# Altium integrated library ALL_COMP (5).IntLib: 200 symbols (part 1 of 2)
Pins are listed as number, name and electrical type; pins without a type are passive.

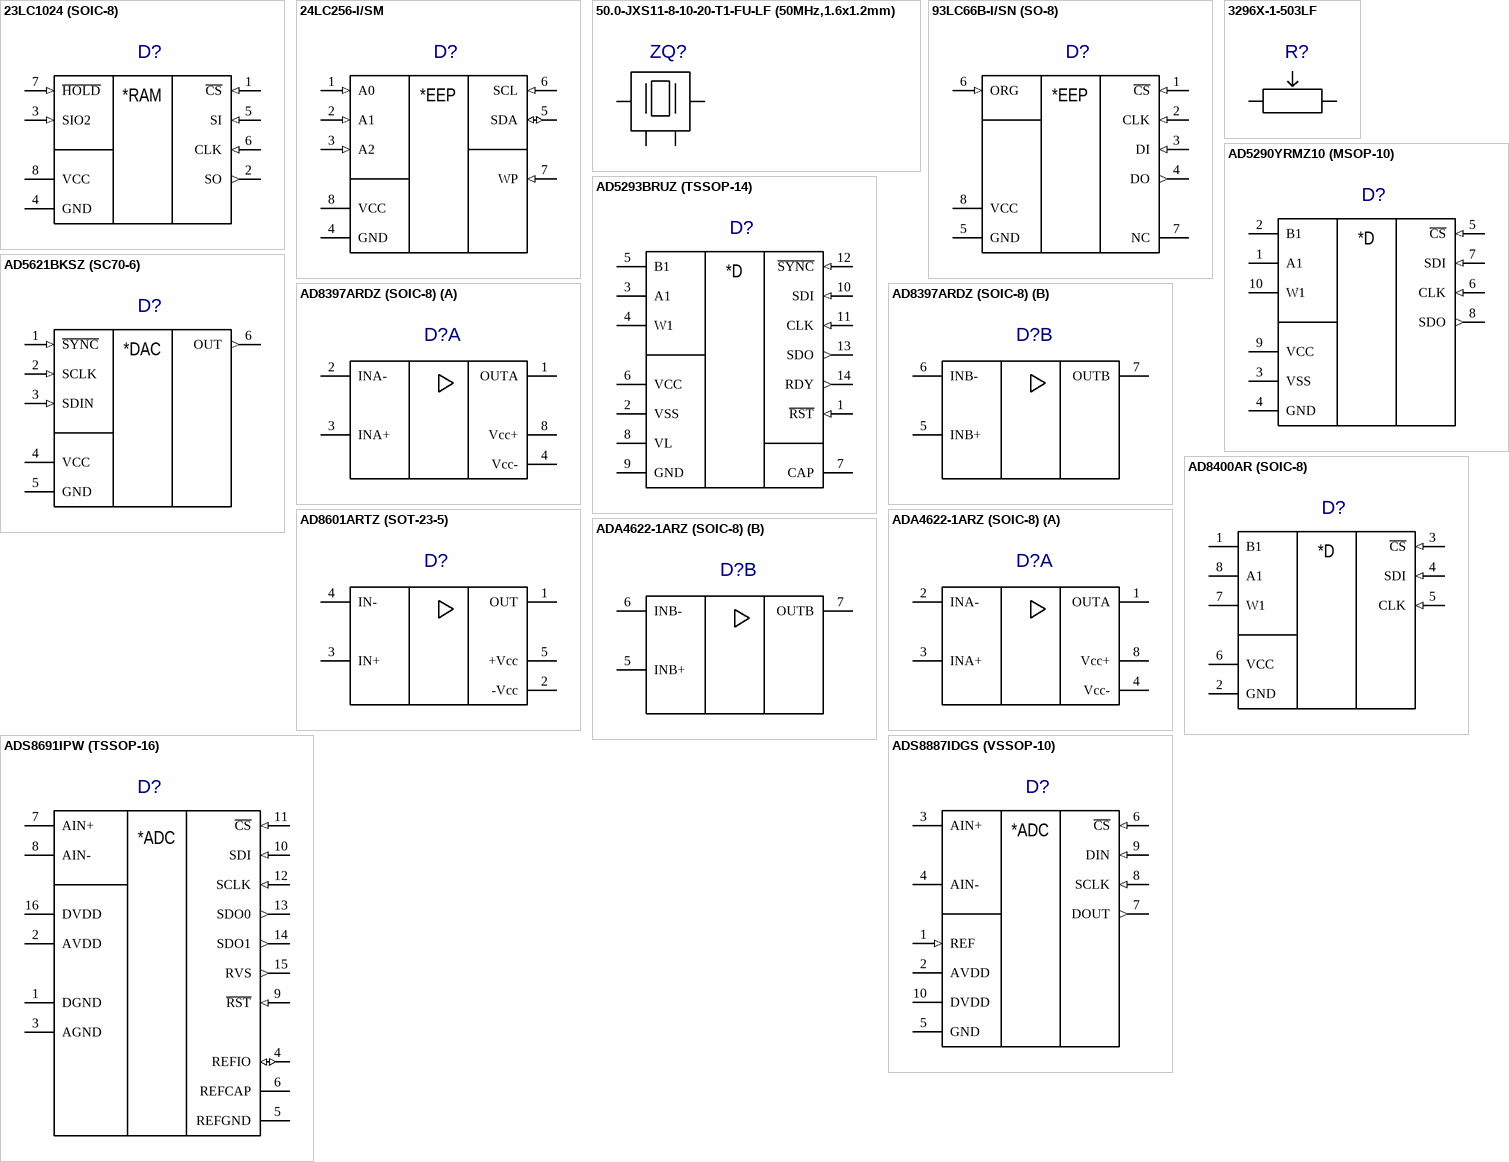
[diagram p0: symbols 23LC1024 (SOIC-8) to ADS8887IDGS (VSSOP-10)]

## 23LC1024 (SOIC-8)
designator D?  (value not drawn)
ComponentHeigt: 1.8; Firme: Linear; Leadform: формована; Kind: Микросхема; ClassName: *; Component Link: *; Packaging: SOT-223; NN: *
footprint SOIC-8(R-8)
pins: 1 ~{CS} (in), 2 SO (out), 3 SIO2 (in), 4 GND, 5 SI (in), 6 CLK (in), 7 ~{HOLD} (in), 8 VCC (power)
text: *RAM

## 24LC256-I/SM
designator D?  (value not drawn)
ComponentHeigt: 1.8; Firme: Linear; Leadform: формована; Kind: Микросхема; ClassName: *; Component Link: *; Packaging: SOT-223; NN: *
footprint SOIC-8(R-8)
pins: 1 A0 (in), 2 A1 (in), 3 A2 (in), 4 GND, 5 SDA (io), 6 SCL (in), 7 WP (in), 8 VCC (power)
text: *EEP

## 50.0-JXS11-8-10-20-T1-FU-LF (50MHz,1.6x1.2mm)
designator ZQ?  (value not drawn)
ComponentHeigt: 1.8; Firme: Linear; Leadform: формована; Kind: Микросхема; ClassName: *; Component Link: *; Packaging: SOT-223; NN: *
footprint 50.0-JXS11-8-10-20-T1-FU-LF (50MHz,1.6x1.2mm) (HC-49SM)
pins: 1 (power), 2 (power), 3 (power), 4 (power)

## 93LC66B-I/SN (SO-8)
designator D?  (value not drawn)
ComponentHeigt: 1.8; Firme: Linear; Leadform: формована; Kind: Микросхема; ClassName: *; Component Link: *; Packaging: SOT-223; NN: *
footprint SOIC-8(R-8)
pins: 1 ~{CS} (in), 2 CLK (in), 3 DI (in), 4 DO (out), 5 GND, 6 ORG (in), 7 NC, 8 VCC (power)
text: *EEP

## 3296X-1-503LF
designator R?  (value not drawn)
ComponentHeigt: 0.6; Firme: Yageo; Leadform: SMD; Kind: Резистор; ClassName: *; ComponentWeigt: *; Component Link: *; Packaging: 0805; NN: *; Value: *
footprint 3296X-1-503LF
pins: 1, 2, 3

## AD5290YRMZ10 (MSOP-10)
designator D?  (value not drawn)
ComponentHeigt: 1.8; Firme: Linear; Leadform: формована; Kind: Микросхема; ClassName: *; Component Link: *; Packaging: SOT-223; NN: *
footprint MSOP-10
pins: 1 A1, 2 B1, 3 VSS (power), 4 GND, 5 ~{CS} (in), 6 CLK (in), 7 SDI (in), 8 SDO (out), 9 VCC (power), 10 W1
text: *D

## AD5293BRUZ (TSSOP-14)
designator D?  (value not drawn)
ComponentHeigt: 1.8; Firme: Linear; Leadform: формована; Kind: Микросхема; ClassName: *; Component Link: *; Packaging: SOT-223; NN: *
footprint TSSOP-14
pins: 1 ~{RST} (in), 2 VSS (power), 3 A1, 4 W1, 5 B1, 6 VCC (power), 7 CAP, 8 VL (power), 9 GND, 10 SDI (in), 11 CLK (in), 12 ~{SYNC} (in), 13 SDO (out), 14 RDY (out)
text: *D

## AD5621BKSZ (SC70-6)
designator D?  (value not drawn)
ComponentHeigt: 1.8; Firme: Linear; Leadform: формована; Kind: Микросхема; ClassName: *; Component Link: *; Packaging: SOT-223; NN: *
footprint SC70-6
pins: 1 ~{SYNC} (in), 2 SCLK (in), 3 SDIN (in), 4 VCC (power), 5 GND, 6 OUT (out)
text: *DAC

## AD8397ARDZ (SOIC-8)
designator D?  (value not drawn)
ComponentHeigt: 1.75; Firme: AD; Leadform: SMD; NN: 28017970; Kind: Микросхема OP184FSZ AD; ClassName: *; Component Link: http://www.analog.com/; ComponentWeigt: *; Packaging: SOIC-8(R-8)
footprint SOIC-8(RD-8-2)
part A pins: 1 OUTA, 2 INA-, 3 INA+, 4 Vcc-, 8 Vcc+
part B pins: 5 INB+, 6 INB-, 7 OUTB

## AD8400AR (SOIC-8)
designator D?  (value not drawn)
ComponentHeigt: 1.8; Firme: Linear; Leadform: формована; Kind: Микросхема; ClassName: *; Component Link: *; Packaging: SOT-223; NN: *
footprint SOIC-8(R-8)
pins: 1 B1, 2 GND, 3 ~{CS} (in), 4 SDI (in), 5 CLK (in), 6 VCC (power), 7 W1, 8 A1
text: *D

## AD8601ARTZ (SOT-23-5)
designator D?  (value not drawn)
ComponentHeigt: 1.75; Firme: AD; Leadform: SMD; NN: 28017970; Kind: Микросхема OP184FSZ AD; ClassName: *; Component Link: http://www.analog.com/; ComponentWeigt: *; Packaging: SOIC-8(R-8)
footprint SOT-23-5
pins: 1 OUT, 2 -Vcc, 3 IN+, 4 IN-, 5 +Vcc (power)

## ADA4622-1ARZ (SOIC-8)
designator D?  (value not drawn)
ComponentHeigt: 1.75; Firme: AD; Leadform: SMD; NN: 28017970; Kind: Микросхема OP184FSZ AD; ClassName: *; Component Link: http://www.analog.com/; ComponentWeigt: *; Packaging: SOIC-8(R-8)
footprint SOIC-8(R-8)
part A pins: 1 OUTA, 2 INA-, 3 INA+, 4 Vcc-, 8 Vcc+
part B pins: 5 INB+, 6 INB-, 7 OUTB

## ADS8691IPW (TSSOP-16)
designator D?  (value not drawn)
ComponentHeigt: 1.8; Firme: Linear; Leadform: формована; Kind: Микросхема; ClassName: *; Component Link: *; Packaging: SOT-223; NN: *
footprint TSSOP-16
pins: 1 DGND, 2 AVDD (power), 3 AGND, 4 REFIO (io), 5 REFGND, 6 REFCAP, 7 AIN+, 8 AIN-, 9 ~{RST} (in), 10 SDI (in), 11 ~{CS} (in), 12 SCLK (in), 13 SDO0 (out), 14 SDO1 (out), 15 RVS (out), 16 DVDD (power)
text: *ADC

## ADS8887IDGS (VSSOP-10)
designator D?  (value not drawn)
ComponentHeigt: 1.8; Firme: Linear; Leadform: формована; Kind: Микросхема; ClassName: *; Component Link: *; Packaging: SOT-223; NN: *
footprint VSSOP-10
pins: 1 REF (in), 2 AVDD (power), 3 AIN+, 4 AIN-, 5 GND, 6 ~{CS} (in), 7 DOUT (out), 8 SCLK (in), 9 DIN (in), 10 DVDD (power)
text: *ADC

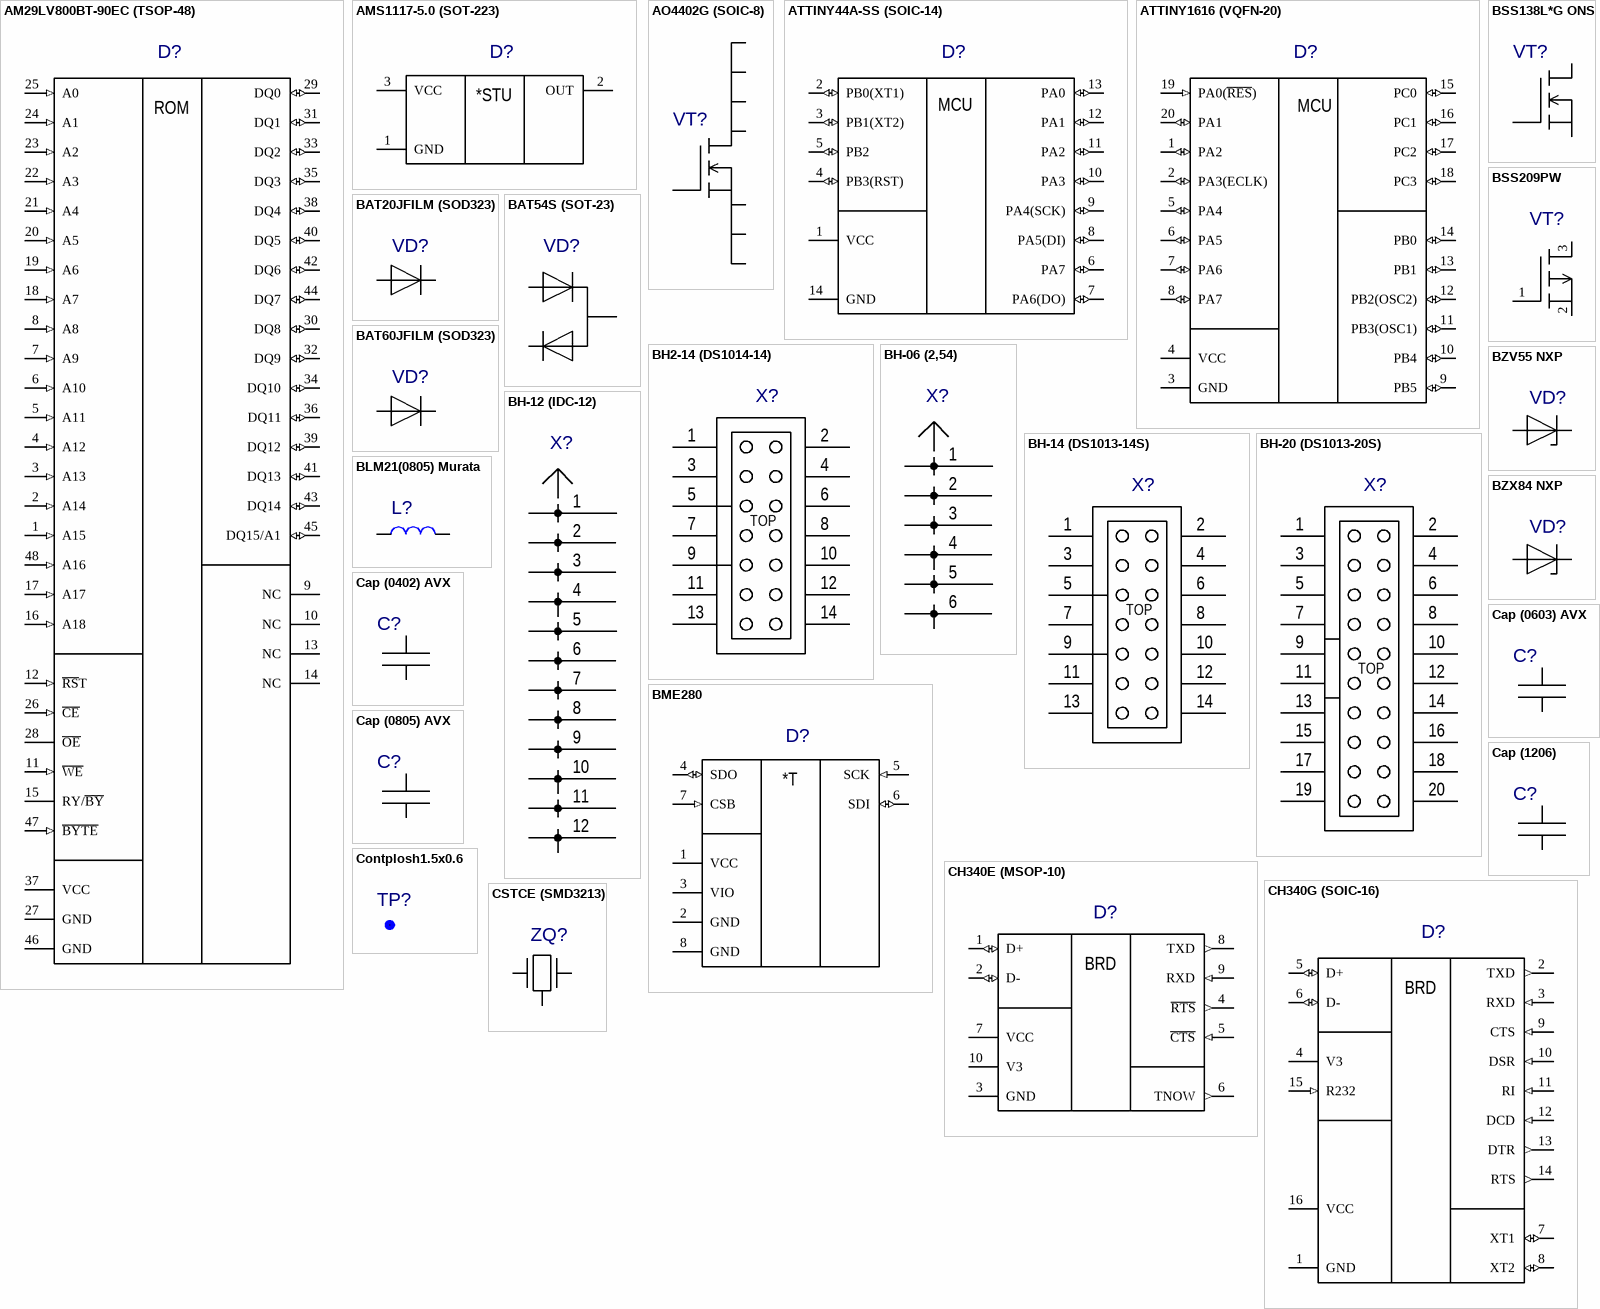
[diagram p1: symbols AM29LV800BT-90EC (TSOP-48) to CSTCE (SMD3213)]

## AM29LV800BT-90EC (TSOP-48)
designator D?
Leadform: по чертежу; Note: Установка по чертежу; Kind: Микросхема; Component Link: www.honeywell.com/radhard; ClassName: *; NN: *
footprint TSOP-48 (ZIF)
pins: 1 A15 (in), 2 A14 (in), 3 A13 (in), 4 A12 (in), 5 A11 (in), 6 A10 (in), 7 A9 (in), 8 A8 (in), 9 NC, 10 NC, 11 ~{WE} (in), 12 ~{RS}T (in), 13 NC, 14 NC, 15 RY/~{BY}, 16 A18 (in), 17 A17 (in), 18 A7 (in), 19 A6 (in), 20 A5 (in), 21 A4 (in), 22 A3 (in), 23 A2 (in), 24 A1 (in), 25 A0 (in), 26 ~{CE} (in), 27 GND, 28 ~{OE}, 29 DQ0 (io), 30 DQ8 (io), 31 DQ1 (io), 32 DQ9 (io), 33 DQ2 (io), 34 DQ10 (io), 35 DQ3 (io), 36 DQ11 (io), 37 VCC (power), 38 DQ4 (io), 39 DQ12 (io), 40 DQ5 (io), 41 DQ13 (io), 42 DQ6 (io), 43 DQ14 (io), 44 DQ7 (io), 45 DQ15/A1 (io), 46 GND, 47 ~{BYTE} (in), 48 A16 (in)
text: ROM

## AMS1117-5.0 (SOT-223)
designator D?  (value not drawn)
ComponentHeigt: 1.8; Firme: Linear; Leadform: формована; Kind: Микросхема; ClassName: *; Component Link: *; Packaging: SOT-223; NN: *
footprint SOT-223
pins: 1 GND, 2 OUT, 3 VCC (power)
text: *STU

## AO4402G (SOIC-8)
designator VT?
ComponentHeigt: 1.1; Firme: ONS; Leadform: SMD; NN: 24005234; KIND: Транзистор BSS138L*G ONS; ClassName: *; ComponentWeigt: *; Packaging: SOT-23
footprint SOIC-8(R-8)
pins: 1 S, 2 S, 3 S, 4 G, 5 D, 6 D, 7 D, 8 D

## ATTINY44A-SS (SOIC-14)
designator D?
Leadform: по чертежу; Note: Установка по чертежу; Kind: Микросхема; Component Link: www.honeywell.com/radhard; ClassName: *; NN: *
footprint SOIC-14
pins: 1 VCC (power), 2 PB0(XT1) (io), 3 PB1(XT2) (io), 4 PB3(RST) (io), 5 PB2 (io), 6 PA7 (io), 7 PA6(DO) (io), 8 PA5(DI) (io), 9 PA4(SCK) (io), 10 PA3 (io), 11 PA2 (io), 12 PA1 (io), 13 PA0 (io), 14 GND
text: MCU

## ATTINY1616 (VQFN-20)
designator D?
Leadform: по чертежу; Note: Установка по чертежу; Kind: Микросхема; Component Link: www.honeywell.com/radhard; ClassName: *; NN: *
footprint VQFN-20
pins: 1 PA2 (io), 2 PA3(ECLK) (io), 3 GND, 4 VCC (power), 5 PA4 (io), 6 PA5 (io), 7 PA6 (io), 8 PA7 (io), 9 PB5 (io), 10 PB4 (io), 11 PB3(OSC1) (io), 12 PB2(OSC2) (io), 13 PB1 (io), 14 PB0 (io), 15 PC0 (io), 16 PC1 (io), 17 PC2 (io), 18 PC3 (io), 19 PA0(~{RES}) (in), 20 PA1 (io)
text: MCU

## BAT20JFILM (SOD323)
designator VD?  (value not drawn)
ComponentHeigt: 0.75; Leadform: в отверстия; Firme: Kingbright; NN: 24003000; KIND: Светодиод L-1154GD Kingbright; Component Link: *; ClassName: *
footprint SOD323
pins: 1 A, 2 K
1 alternate drawing of the same symbol

## BAT54S (SOT-23)
designator VD?  (value not drawn)
ComponentHeigt: 0.75; Leadform: в отверстия; Firme: Kingbright; NN: 24003000; KIND: Светодиод L-1154GD Kingbright; Component Link: *; ClassName: *
footprint SOT-23
pins: 1 A, 2 K, 3 M
1 alternate drawing of the same symbol

## BAT60JFILM (SOD323)
designator VD?  (value not drawn)
ComponentHeigt: 0.75; Leadform: в отверстия; Firme: Kingbright; NN: 24003000; KIND: Светодиод L-1154GD Kingbright; Component Link: *; ClassName: *
footprint SOD323
pins: 1 A, 2 K
1 alternate drawing of the same symbol

## BH2-14 (DS1014-14)
designator X?  (value not drawn)
ComponentHeigt: 5.5; Name: Вилка; Specification: Вилка PLD2-2 *; Typ: PLD2-2; ClassName: *; Component Link: *; ComponentWeigt: *; Firme: *; Leadform: *; NN: *; KIND: *
footprint BH2-14 (DS1014-14)
pins: 1, 2, 3, 4, 5, 6, 7, 8, 9, 10, 11, 12, 13, 14
1 alternate drawing of the same symbol
text: TOP

## BH-06 (2,54)
designator X?  (value not drawn)
ComponentHeigt: 5.5; Name: Вилка; Specification: Вилка PLD2-2 *; Typ: PLD2-2; ClassName: *; Component Link: *; ComponentWeigt: *; Firme: *; Leadform: *; NN: *; KIND: *
footprint BH-06 (2,54)
pins: 1, 2, 3, 4, 5, 6
1 alternate drawing of the same symbol

## BH-12 (IDC-12)
designator X?  (value not drawn)
ComponentHeigt: 5.5; Name: Вилка; Specification: Вилка PLD2-2 *; Typ: PLD2-2; ClassName: *; Component Link: *; ComponentWeigt: *; Firme: *; Leadform: *; NN: *; KIND: *
footprint BH-12 (IDC-12)
pins: 1, 2, 3, 4, 5, 6, 7, 8, 9, 10, 11, 12
1 alternate drawing of the same symbol

## BH-14 (DS1013-14S)
designator X?  (value not drawn)
ComponentHeigt: 5.5; Name: Вилка; Specification: Вилка PLD2-2 *; Typ: PLD2-2; ClassName: *; Component Link: *; ComponentWeigt: *; Firme: *; Leadform: *; NN: *; KIND: *
footprint BH-14 (DS1013-14S)
pins: 1, 2, 3, 4, 5, 6, 7, 8, 9, 10, 11, 12, 13, 14
1 alternate drawing of the same symbol
text: TOP

## BH-20 (DS1013-20S)
designator X?  (value not drawn)
ComponentHeigt: 5.5; Name: Вилка; Specification: Вилка PLD2-2 *; Typ: PLD2-2; ClassName: *; Component Link: *; ComponentWeigt: *; Firme: *; Leadform: *; NN: *; KIND: *
footprint BH-20 (DS1013-20S)
pins: 1, 2, 3, 4, 5, 6, 7, 8, 9, 10, 11, 12, 13, 14, 15, 16, 17, 18, 19, 20
1 alternate drawing of the same symbol
text: TOP

## BLM21(0805) Murata
designator L?  (value not drawn)
ComponentHeigt: 1.1; Leadform: SMD; Firme: Murata; ClassName: *; Component Link: *; ComponentWeigt: *; Packaging: 1206; NN: *; KIND: *
footprint 0805
pins: 1, 2

## BME280
designator D?  (value not drawn)
ComponentHeigt: 1.8; Firme: Linear; Leadform: формована; Kind: Микросхема; ClassName: *; Component Link: *; Packaging: SOT-223; NN: *
footprint BME280
pins: 1 VCC (power), 2 GND, 3 VIO (power), 4 SDO (io), 5 SCK (in), 6 SDI (io), 7 CSB (in), 8 GND
text: *T

## BSS138L*G ONS
designator VT?
ComponentHeigt: 1.1; Firme: ONS; Leadform: SMD; NN: 24005234; KIND: Транзистор BSS138L*G ONS; ClassName: *; ComponentWeigt: *; Packaging: SOT-23
footprint SOT-23
pins: 1 G, 2 S, 3 D

## BSS209PW
designator VT?
ComponentHeigt: 0.9; Firme: Infineon; Leadform: SMD; NN: 24003422; KIND: Транзистор BSS209PW Infineon; ClassName: *; ComponentWeigt: *; Packaging: PG-SOT-323
footprint SOT-323
pins: 1 G, 2 S, 3 D

## BZV55 NXP
designator VD?  (value not drawn)
ComponentHeigt: 1.6; Leadform: SMD; Firme: NXP; KIND: Стабилитрон BZV55; ClassName: *; INV: *; Packaging: SOD80C
footprint SOD80C
pins: 1 A, 2 K

## BZX84 NXP
designator VD?  (value not drawn)
ComponentHeigt: 1.6; Leadform: SMD; Firme: NXP; KIND: Стабилитрон BZV55; ClassName: *; INV: *; Packaging: SOD80C
footprint SOT-23
pins: 1 A, 3 K

## Cap (0402) AVX
designator C?
ComponentHeigt: 1.3; Firme: AVX; Leadform: SMD; KIND: Конденсатор; ClassName: *; Component Link: *; ComponentWeigt: *; Packaging: 0805; NN: *; Value: *
footprint 0402
pins: 1, 2

## Cap (0603) AVX
designator C?
ComponentHeigt: 1.3; Firme: AVX; Leadform: SMD; KIND: Конденсатор; ClassName: *; Component Link: *; ComponentWeigt: *; Packaging: 0805; NN: *; Value: *
footprint 0603
pins: 1, 2

## Cap (0805) AVX
designator C?
ComponentHeigt: 1.3; Firme: AVX; Leadform: SMD; KIND: Конденсатор; ClassName: *; Component Link: *; ComponentWeigt: *; Packaging: 0805; NN: *; Value: *
footprint 0805
pins: 1, 2

## Cap (1206)
designator C?
ComponentHeigt: 1.3; Firme: AVX; Leadform: SMD; KIND: Конденсатор; ClassName: *; Component Link: *; ComponentWeigt: *; Packaging: 0805; NN: *; Value: *
footprint 1206
pins: 1, 2

## CH340E (MSOP-10)
designator D?
Leadform: по чертежу; Note: Установка по чертежу; Kind: Микросхема; Component Link: www.honeywell.com/radhard; ClassName: *; NN: *
footprint MSOP-10
pins: 1 D+ (io), 2 D- (io), 3 GND, 4 ~{RTS} (out), 5 ~{CTS} (in), 6 TNOW (out), 7 VCC (power), 8 TXD (out), 9 RXD (in), 10 V3
text: BRD

## CH340G (SOIC-16)
designator D?
Leadform: по чертежу; Note: Установка по чертежу; Kind: Микросхема; Component Link: www.honeywell.com/radhard; ClassName: *; NN: *
footprint SOIC-16
pins: 1 GND, 2 TXD (out), 3 RXD (in), 4 V3, 5 D+ (io), 6 D- (io), 7 XT1 (io), 8 XT2 (io), 9 CTS (in), 10 DSR (in), 11 RI (in), 12 DCD (in), 13 DTR (out), 14 RTS (out), 15 R232 (in), 16 VCC (power)
text: BRD

## Contplosh1.5x0.6
designator TP?  (value not drawn)
ClassName: *
footprint Plosh15X06
pins: 1

## CSTCE (SMD3213)
designator ZQ?  (value not drawn)
footprint CSTCE (SMD3213)
pins: 1 (power), 2 (power), 3 (power)

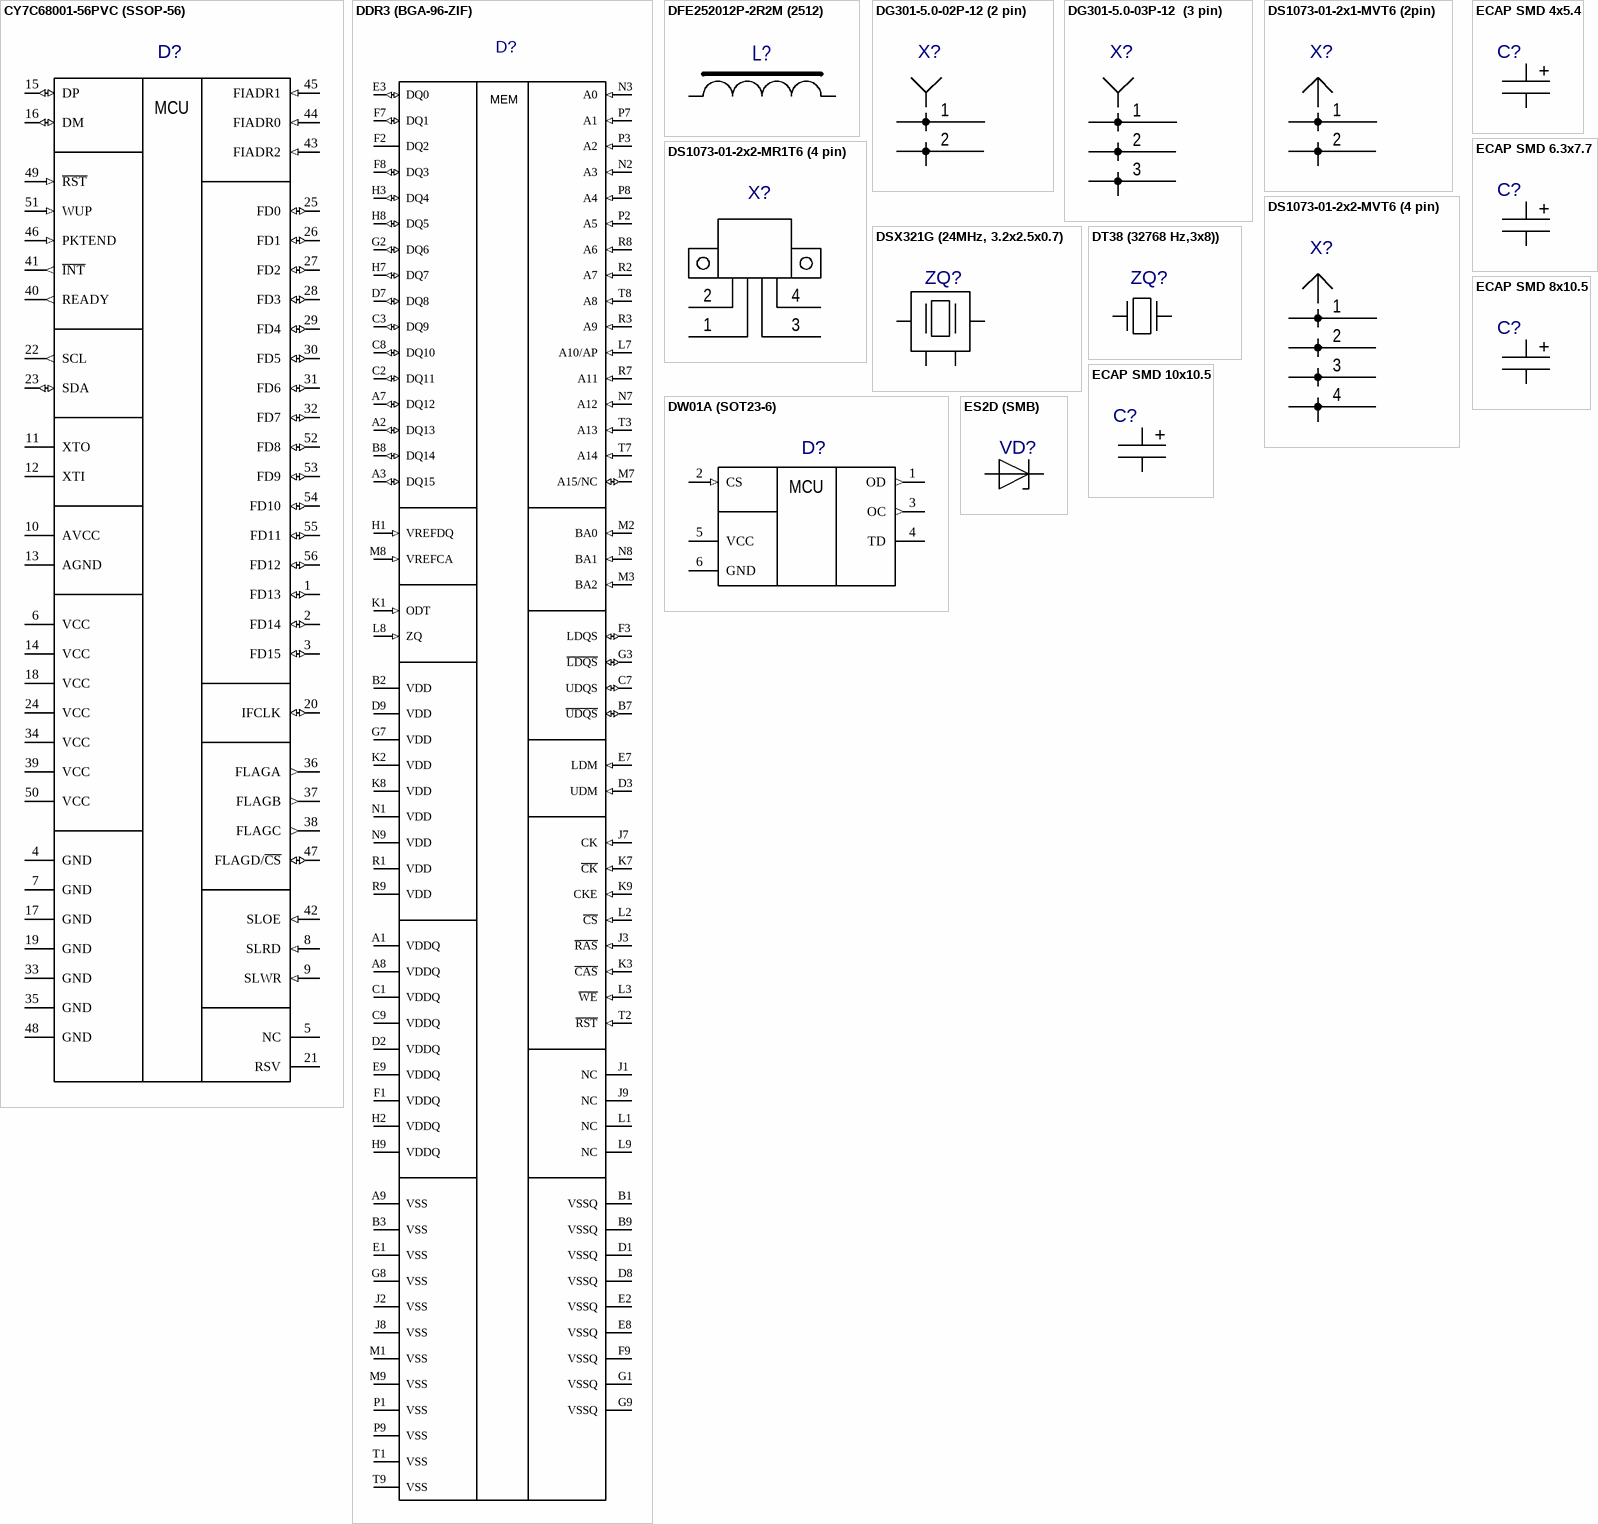
[diagram p2: symbols CY7C68001-56PVC (SSOP-56) to ES2D (SMB)]

## CY7C68001-56PVC (SSOP-56)
designator D?
Leadform: по чертежу; Note: Установка по чертежу; Kind: Микросхема; Component Link: www.honeywell.com/radhard; ClassName: *; NN: *
footprint SSOP-56
pins: 1 FD13 (io), 2 FD14 (io), 3 FD15 (io), 4 GND, 5 NC, 6 VCC (power), 7 GND, 8 SLRD (in), 9 SLWR (in), 10 AVCC (power), 11 XTO, 12 XTI, 13 AGND, 14 VCC (power), 15 DP (io), 16 DM (io), 17 GND, 18 VCC (power), 19 GND, 20 IFCLK (io), 21 RSV, 22 SCL (out), 23 SDA (io), 24 VCC (power), 25 FD0 (io), 26 FD1 (io), 27 FD2 (io), 28 FD3 (io), 29 FD4 (io), 30 FD5 (io), 31 FD6 (io), 32 FD7 (io), 33 GND, 34 VCC (power), 35 GND, 36 FLAGA (out), 37 FLAGB (out), 38 FLAGC (out), 39 VCC (power), 40 READY (out), 41 ~{INT} (out), 42 SLOE (in), 43 FIADR2 (in), 44 FIADR0 (in), 45 FIADR1 (in), 46 PKTEND (in), 47 FLAGD/~{CS} (io), 48 GND, 49 ~{RST} (in), 50 VCC (power), 51 WUP (in), 52 FD8 (io), 53 FD9 (io), 54 FD10 (io), 55 FD11 (io), 56 FD12 (io)
text: MCU

## DDR3 (BGA-96-ZIF)
designator D?
Leadform: по чертежу; Note: Установка по чертежу; Kind: Микросхема; Component Link: www.honeywell.com/radhard; ClassName: *; NN: *
footprint VFBGA-96 (ZIF)
pins: A1 VDDQ (power), A2 DQ13 (io), A3 DQ15 (io), A7 DQ12 (io), A8 VDDQ (power), A9 VSS, B1 VSSQ, B2 VDD (power), B3 VSS, B7 ~{UDQS} (io), B8 DQ14 (io), B9 VSSQ, C1 VDDQ (power), C2 DQ11 (io), C3 DQ9 (io), C7 UDQS (io), C8 DQ10 (io), C9 VDDQ (power), D1 VSSQ, D2 VDDQ (power), D3 UDM (in), D7 DQ8 (io), D8 VSSQ, D9 VDD (power), E1 VSS, E2 VSSQ, E3 DQ0 (io), E7 LDM (in), E8 VSSQ, E9 VDDQ (power), F1 VDDQ (power), F2 DQ2, F3 LDQS (io), F7 DQ1 (io), F8 DQ3 (io), F9 VSSQ, G1 VSSQ, G2 DQ6 (io), G3 ~{LDQS} (io), G7 VDD (power), G8 VSS, G9 VSSQ, H1 VREFDQ (in), H2 VDDQ (power), H3 DQ4 (io), H7 DQ7 (io), H8 DQ5 (io), H9 VDDQ (power), J1 NC, J2 VSS, J3 ~{RAS} (in), J7 CK (in), J8 VSS, J9 NC, K1 ODT (in), K2 VDD (power), K3 ~{CAS} (in), K7 ~{CK} (in), K8 VDD (power), K9 CKE (in), L1 NC, L2 ~{CS} (in), L3 ~{WE} (in), L7 A10/AP (in), L8 ZQ (in), L9 NC, M1 VSS, M2 BA0 (in), M3 BA2 (in), M7 A15/NC (io), M8 VREFCA (in), M9 VSS, N1 VDD (power), N2 A3 (in), N3 A0 (in), N7 A12 (in), N8 BA1 (in), N9 VDD (power), P1 VSS, P2 A5 (in), P3 A2 (in), P7 A1 (in), P8 A4 (in), P9 VSS, R1 VDD (power), R2 A7 (in), R3 A9 (in), R7 A11 (in), R8 A6 (in), R9 VDD (power), T1 VSS, T2 ~{RST} (in), T3 A13 (in), T7 A14 (in), T8 A8 (in), T9 VSS
text: MEM

## DFE252012P-2R2M (2512)
designator L?, comment 0.37 Ohm  (value not drawn)
Value: {Value}; ComponentHeigt: 3.2; Firm: TDK; Name: Катушка индуктивности; Kind: Катушка индуктивности B82432T TDK; Typ: B82432T; NN: *; Packaging: SIMIT 1812-T
footprint DFE252012P-2R2M (2512)
pins: 1, 2

## DG301-5.0-02P-12 (2 pin)
designator X?  (value not drawn)
ComponentHeigt: 5.5; Name: Вилка; Specification: Вилка PLD2-2 *; Typ: PLD2-2; ClassName: *; Component Link: *; ComponentWeigt: *; Firme: *; Leadform: *; NN: *; KIND: *
footprint DG301-5.0-02P-12
pins: 1, 2
1 alternate drawing of the same symbol

## DG301-5.0-03P-12  (3 pin)
designator X?  (value not drawn)
ComponentHeigt: 5.5; Name: Вилка; Specification: Вилка PLD2-2 *; Typ: PLD2-2; ClassName: *; Component Link: *; ComponentWeigt: *; Firme: *; Leadform: *; NN: *; KIND: *
footprint DG301-5.0-03P-12
pins: 1, 2, 3
1 alternate drawing of the same symbol

## DS1073-01-2x1-MVT6 (2pin)
designator X?  (value not drawn)
ComponentHeigt: 5.5; Name: Вилка; Specification: Вилка PLD2-2 *; Typ: PLD2-2; ClassName: *; Component Link: *; ComponentWeigt: *; Firme: *; Leadform: *; NN: *; KIND: *
footprint DS1073-01-2x1-MVT6 (2 pin)
pins: 1, 2
1 alternate drawing of the same symbol

## DS1073-01-2x2-MR1T6 (4 pin)
designator X?  (value not drawn)
ComponentHeigt: 5.5; Name: Вилка; Specification: Вилка PLD2-2 *; Typ: PLD2-2; ClassName: *; Component Link: *; ComponentWeigt: *; Firme: *; Leadform: *; NN: *; KIND: *
footprint DS1073-01-2x2-MR1T6 (4 pin)
pins: 1, 2, 3, 4
1 alternate drawing of the same symbol

## DS1073-01-2x2-MVT6 (4 pin)
designator X?  (value not drawn)
ComponentHeigt: 5.5; Name: Вилка; Specification: Вилка PLD2-2 *; Typ: PLD2-2; ClassName: *; Component Link: *; ComponentWeigt: *; Firme: *; Leadform: *; NN: *; KIND: *
footprint DS1073-01-2x2-MVT6 (4 pin)
pins: 1, 2, 3, 4
1 alternate drawing of the same symbol

## DSX321G (24MHz, 3.2x2.5x0.7)
designator ZQ?  (value not drawn)
footprint DSX321G (3.2x2.5x0.7) (DSX321G)
pins: 1 (power), 2 (power), 3 (power), 4 (power)

## DT38 (32768 Hz,3x8))
designator ZQ?  (value not drawn)
footprint DT38
pins: 1 (power), 2 (power)

## DW01A (SOT23-6)
designator D?  (value not drawn)
ComponentHeigt: 1.8; Firme: Linear; Leadform: формована; Kind: Микросхема; ClassName: *; Component Link: *; Packaging: SOT-223; NN: *
footprint SOT23-6
pins: 1 OD (out), 2 CS (in), 3 OC (out), 4 TD, 5 VCC (power), 6 GND
text: MCU

## ECAP SMD 4x5.4
designator C?
ComponentHeigt: 1.3; Firme: AVX; Leadform: SMD; KIND: Конденсатор; ClassName: *; Component Link: *; ComponentWeigt: *; Packaging: 0805; NN: *; Value: *
footprint ECAP SMD 4x5.4
pins: 1, 2
text: +

## ECAP SMD 6.3x7.7
designator C?
ComponentHeigt: 1.3; Firme: AVX; Leadform: SMD; KIND: Конденсатор; ClassName: *; Component Link: *; ComponentWeigt: *; Packaging: 0805; NN: *; Value: *
footprint ECAP SMD 6.3x7.7
pins: 1, 2
text: +

## ECAP SMD 8x10.5
designator C?
ComponentHeigt: 1.3; Firme: AVX; Leadform: SMD; KIND: Конденсатор; ClassName: *; Component Link: *; ComponentWeigt: *; Packaging: 0805; NN: *; Value: *
footprint ECAP SMD 8x10.5
pins: 1, 2
text: +

## ECAP SMD 10x10.5
designator C?
ComponentHeigt: 1.3; Firme: AVX; Leadform: SMD; KIND: Конденсатор; ClassName: *; Component Link: *; ComponentWeigt: *; Packaging: 0805; NN: *; Value: *
footprint ECAP SMD 10x10.5
pins: 1, 2
text: +

## ES2D (SMB)
designator VD?
ComponentHeigt: 2.47; ComponentWeigt: 0.95; Firme: ONS; Leadform: SMD; NN: 20603471; KIND: Диод MBRS360BT3G ONS; ClassName: *; Packaging: SMB
footprint SMB(DO-214AA)
pins: 1 A, 2 K

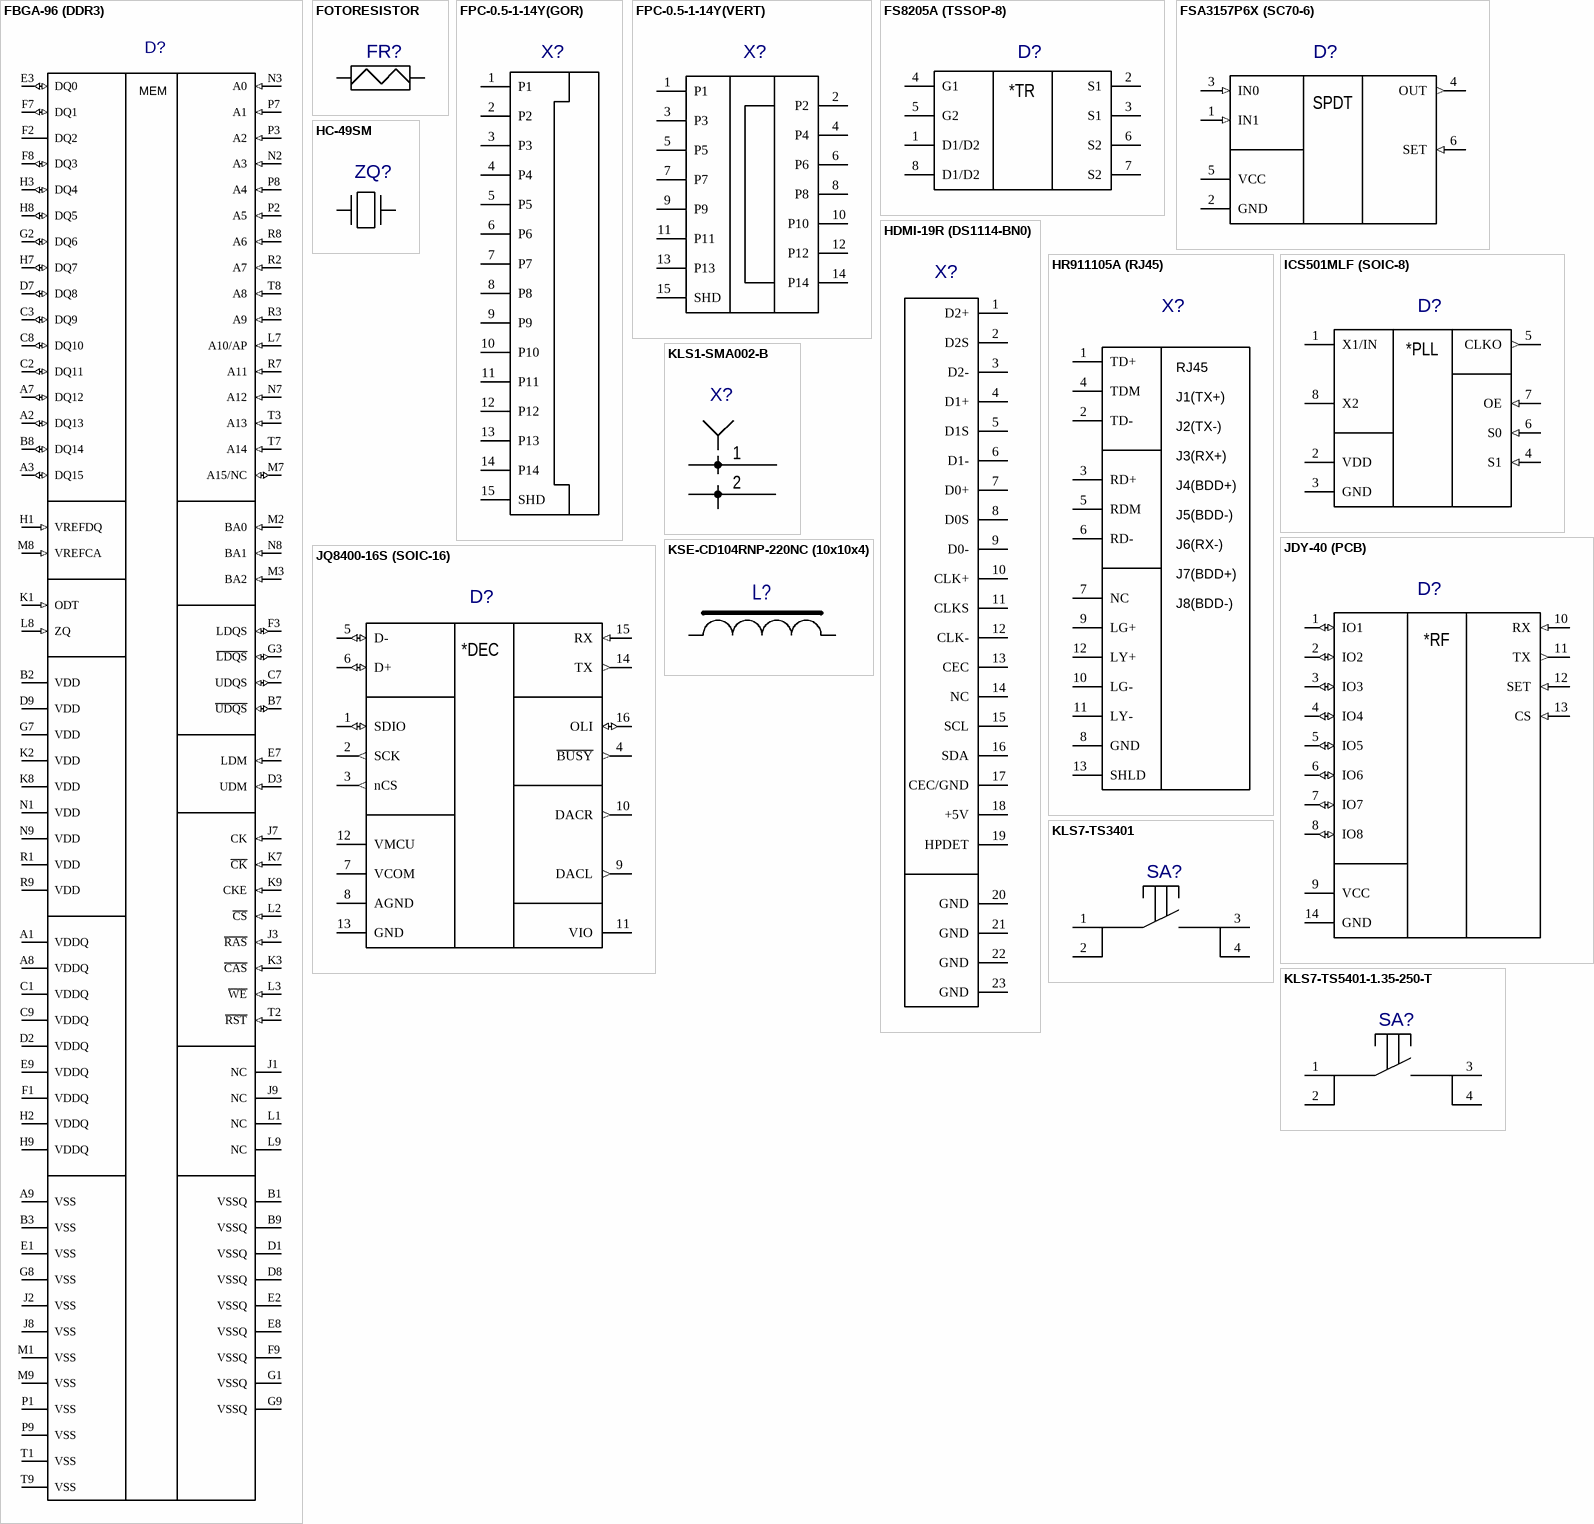
[diagram p3: symbols FBGA-96 (DDR3) to KSE-CD104RNP-220NC (10x10x4)]

## FBGA-96 (DDR3)
designator D?, comment ASS3145-BGA96-8X14-0.8(1.4)-SC  (value not drawn)
ComponentHeigt: 1.8; Firme: Linear; Leadform: формована; Kind: Микросхема; ClassName: *; Component Link: *; Packaging: SOT-223; NN: *
footprint ASS3145-BGA96-8X14-0.8(1.4)-SC
pins: A1 VDDQ (power), A2 DQ13 (io), A3 DQ15 (io), A7 DQ12 (io), A8 VDDQ (power), A9 VSS, B1 VSSQ, B2 VDD (power), B3 VSS, B7 ~{UDQS} (io), B8 DQ14 (io), B9 VSSQ, C1 VDDQ (power), C2 DQ11 (io), C3 DQ9 (io), C7 UDQS (io), C8 DQ10 (io), C9 VDDQ (power), D1 VSSQ, D2 VDDQ (power), D3 UDM (in), D7 DQ8 (io), D8 VSSQ, D9 VDD (power), E1 VSS, E2 VSSQ, E3 DQ0 (io), E7 LDM (in), E8 VSSQ, E9 VDDQ (power), F1 VDDQ (power), F2 DQ2, F3 LDQS (io), F7 DQ1 (io), F8 DQ3 (io), F9 VSSQ, G1 VSSQ, G2 DQ6 (io), G3 ~{LDQS} (io), G7 VDD (power), G8 VSS, G9 VSSQ, H1 VREFDQ (in), H2 VDDQ (power), H3 DQ4 (io), H7 DQ7 (io), H8 DQ5 (io), H9 VDDQ (power), J1 NC, J2 VSS, J3 ~{RAS} (in), J7 CK (in), J8 VSS, J9 NC, K1 ODT (in), K2 VDD (power), K3 ~{CAS} (in), K7 ~{CK} (in), K8 VDD (power), K9 CKE (in), L1 NC, L2 ~{CS} (in), L3 ~{WE} (in), L7 A10/AP (in), L8 ZQ (in), L9 NC, M1 VSS, M2 BA0 (in), M3 BA2 (in), M7 A15/NC (io), M8 VREFCA (in), M9 VSS, N1 VDD (power), N2 A3 (in), N3 A0 (in), N7 A12 (in), N8 BA1 (in), N9 VDD (power), P1 VSS, P2 A5 (in), P3 A2 (in), P7 A1 (in), P8 A4 (in), P9 VSS, R1 VDD (power), R2 A7 (in), R3 A9 (in), R7 A11 (in), R8 A6 (in), R9 VDD (power), T1 VSS, T2 ~{RST} (in), T3 A13 (in), T7 A14 (in), T8 A8 (in), T9 VSS
text: MEM

## FOTORESISTOR
designator FR?  (value not drawn)
ComponentHeigt: 0.5; Leadform: SMD; Firme: Yageo; Kind: Резистор; Packaging: 0402; ClassName: *; Component Link: *; NN: *
footprint FOTORESISTOR
pins: 1, 2

## FPC-0.5-1-14Y(GOR)
designator X?  (value not drawn)
ComponentHeigt: 5.5; Name: Вилка; Specification: Вилка PLD2-2 *; Typ: PLD2-2; ClassName: *; Component Link: *; ComponentWeigt: *; Firme: *; Leadform: *; NN: *; KIND: *
footprint FPC-0.5-1-14Y
pins: 1 P1, 2 P2, 3 P3, 4 P4, 5 P5, 6 P6, 7 P7, 8 P8, 9 P9, 10 P10, 11 P11, 12 P12, 13 P13, 14 P14, 15 SHD
1 alternate drawing of the same symbol

## FPC-0.5-1-14Y(VERT)
designator X?  (value not drawn)
ComponentHeigt: 5.5; Name: Вилка; Specification: Вилка PLD2-2 *; Typ: PLD2-2; ClassName: *; Component Link: *; ComponentWeigt: *; Firme: *; Leadform: *; NN: *; KIND: *
footprint FPC-0.5-1-14Y(VERT)
pins: 1 P1, 2 P2, 3 P3, 4 P4, 5 P5, 6 P6, 7 P7, 8 P8, 9 P9, 10 P10, 11 P11, 12 P12, 13 P13, 14 P14, 15 SHD
1 alternate drawing of the same symbol

## FS8205A (TSSOP-8)
designator D?  (value not drawn)
ComponentHeigt: 1.8; Firme: Linear; Leadform: формована; Kind: Микросхема; ClassName: *; Component Link: *; Packaging: SOT-223; NN: *
footprint TSSOP-8
pins: 1 D1/D2, 2 S1, 3 S1, 4 G1, 5 G2, 6 S2, 7 S2, 8 D1/D2
text: *TR

## FSA3157P6X (SC70-6)
designator D?  (value not drawn)
ComponentHeigt: 1.8; Firme: Linear; Leadform: формована; Kind: Микросхема; ClassName: *; Component Link: *; Packaging: SOT-223; NN: *
footprint SC70-6
pins: 1 IN1 (in), 2 GND, 3 IN0 (in), 4 OUT (out), 5 VCC (power), 6 SET (in)
text: SPDT

## HC-49SM
designator ZQ?  (value not drawn)
footprint HC-49SM
pins: 1 (power), 2 (power)

## HDMI-19R (DS1114-BN0)
designator X?  (value not drawn)
ComponentHeigt: 5.5; Name: Вилка; Specification: Вилка PLD2-2 *; Typ: PLD2-2; ClassName: *; Component Link: *; ComponentWeigt: *; Firme: *; Leadform: *; NN: *; KIND: *
footprint HDMI-19R (DS1114-BN0)
pins: 1 D2+, 2 D2S, 3 D2-, 4 D1+, 5 D1S, 6 D1-, 7 D0+, 8 D0S, 9 D0-, 10 CLK+, 11 CLKS, 12 CLK-, 13 CEC, 14 NC, 15 SCL, 16 SDA, 17 CEC/GND, 18 +5V, 19 HPDET, 20 GND, 21 GND, 22 GND, 23 GND
1 alternate drawing of the same symbol

## HR911105A (RJ45)
designator X?  (value not drawn)
ComponentHeigt: 1.8; Firme: Linear; Leadform: формована; Kind: Микросхема; ClassName: *; Component Link: *; Packaging: SOT-223; NN: *
footprint HR911105A(RJ45)
pins: 1 TD+, 2 TD-, 3 RD+, 4 TDM, 5 RDM, 6 RD-, 7 NC, 8 GND, 9 LG+, 10 LG-, 11 LY-, 12 LY+, 13 SHLD
text: RJ45; J1(TX+); J2(TX-); J3(RX+); J4(BDD+); J5(BDD-); J6(RX-); J7(BDD+); J8(BDD-)

## ICS501MLF (SOIC-8)
designator D?  (value not drawn)
ComponentHeigt: 1.8; Firme: Linear; Leadform: формована; Kind: Микросхема; ClassName: *; Component Link: *; Packaging: SOT-223; NN: *
footprint SOIC-8(R-8)
pins: 1 X1/IN, 2 VDD (power), 3 GND, 4 S1 (in), 5 CLKO (out), 6 S0 (in), 7 OE (in), 8 X2
text: *PLL

## JDY-40 (PCB)
designator D?  (value not drawn)
ComponentHeigt: 1.8; Firme: Linear; Leadform: формована; Kind: Микросхема; ClassName: *; Component Link: *; Packaging: SOT-223; NN: *
footprint JDY-40 (PCB)
pins: 1 IO1 (io), 2 IO2 (io), 3 IO3 (io), 4 IO4 (io), 5 IO5 (io), 6 IO6 (io), 7 IO7 (io), 8 IO8 (io), 9 VCC (power), 10 RX (in), 11 TX (out), 12 SET (in), 13 CS (in), 14 GND
text: *RF

## JQ8400-16S (SOIC-16)
designator D?
Leadform: по чертежу; Note: Установка по чертежу; Kind: Микросхема; Component Link: www.honeywell.com/radhard; ClassName: *; NN: *
footprint SOIC-16
pins: 1 SDIO (io), 2 SCK (out), 3 nCS (out), 4 ~{BUSY} (out), 5 D- (io), 6 D+ (io), 7 VCOM, 8 AGND, 9 DACL (out), 10 DACR (out), 11 VIO, 12 VMCU (power), 13 GND, 14 TX (out), 15 RX (in), 16 OLI (io)
text: *DEC

## KLS1-SMA002-B
designator X?  (value not drawn)
ComponentHeigt: 5.5; Name: Вилка; Specification: Вилка PLD2-2 *; Typ: PLD2-2; ClassName: *; Component Link: *; ComponentWeigt: *; Firme: *; Leadform: *; NN: *; KIND: *
footprint KLS1-SMA002-B
pins: 1, 2
1 alternate drawing of the same symbol

## KLS7-TS3401
designator SA?
Component Heigt: 7; Leadform: SMD; Firme: TYCO; NN: 25100175; KIND: Кнопка 1-1977223-9 Tyco; ClassName: *; Component Link: *
footprint KLS7-TS3401
pins: 1, 2, 3, 4

## KLS7-TS5401-1.35-250-T
designator SA?
Component Heigt: 7; Leadform: SMD; Firme: TYCO; NN: 25100175; KIND: Кнопка 1-1977223-9 Tyco; ClassName: *; Component Link: *
footprint KLS7-TS5401-1.35-250-T
pins: 1, 2, 3, 4

## KSE-CD104RNP-220NC (10x10x4)
designator L?, comment 0.37 Ohm  (value not drawn)
Value: {Value}; ComponentHeigt: 3.2; Firm: TDK; Name: Катушка индуктивности; Kind: Катушка индуктивности B82432T TDK; Typ: B82432T; NN: *; Packaging: SIMIT 1812-T
footprint KSE-CD104RNP-220NC
pins: 1, 2

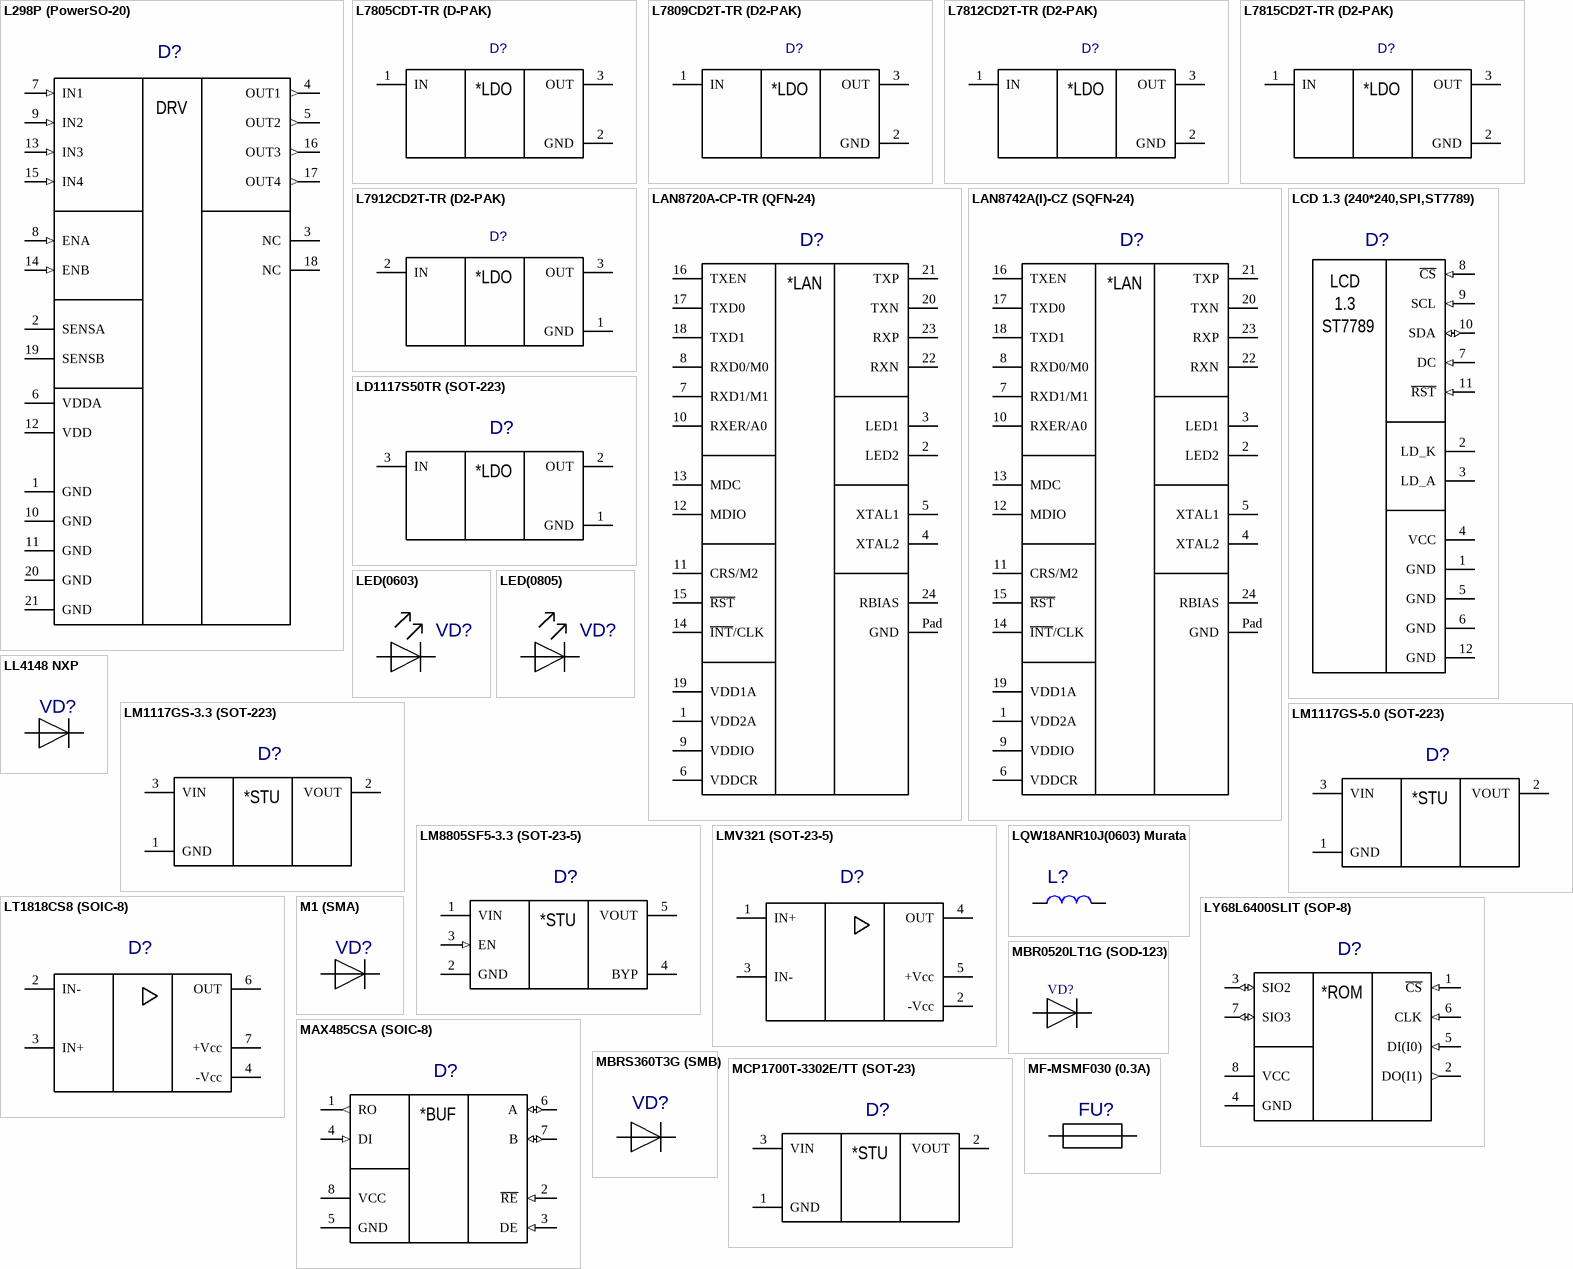
[diagram p4: symbols L298P (PowerSO-20) to MF-MSMF030 (0.3А)]

## L298P (PowerSO-20)
designator D?
Leadform: по чертежу; Note: Установка по чертежу; Kind: Микросхема; Component Link: www.honeywell.com/radhard; ClassName: *; NN: *
footprint PowerSO-20
pins: 1 GND, 2 SENSA, 3 NC, 4 OUT1 (out), 5 OUT2 (out), 6 VDDA (power), 7 IN1 (in), 8 ENA (in), 9 IN2 (in), 10 GND, 11 GND, 12 VDD (power), 13 IN3 (in), 14 ENB (in), 15 IN4 (in), 16 OUT3 (out), 17 OUT4 (out), 18 NC, 19 SENSB, 20 GND, 21 GND
text: DRV

## L7805CDT-TR (D-PAK)
designator D?  (value not drawn)
ComponentHeigt: 1.8; Firme: Linear; Leadform: формована; Kind: Микросхема; ClassName: *; Component Link: *; Packaging: SOT-223; NN: *
footprint D-PAK (TO-252)
pins: 1 IN, 2 GND, 3 OUT
text: *LDO

## L7809CD2T-TR (D2-PAK)
designator D?  (value not drawn)
ComponentHeigt: 1.8; Firme: Linear; Leadform: формована; Kind: Микросхема; ClassName: *; Component Link: *; Packaging: SOT-223; NN: *
footprint D2-PAK
pins: 1 IN, 2 GND, 3 OUT
text: *LDO

## L7812CD2T-TR (D2-PAK)
designator D?  (value not drawn)
ComponentHeigt: 1.8; Firme: Linear; Leadform: формована; Kind: Микросхема; ClassName: *; Component Link: *; Packaging: SOT-223; NN: *
footprint D2-PAK
pins: 1 IN, 2 GND, 3 OUT
text: *LDO

## L7815CD2T-TR (D2-PAK)
designator D?  (value not drawn)
ComponentHeigt: 1.8; Firme: Linear; Leadform: формована; Kind: Микросхема; ClassName: *; Component Link: *; Packaging: SOT-223; NN: *
footprint D2-PAK
pins: 1 IN, 2 GND, 3 OUT
text: *LDO

## L7912CD2T-TR (D2-PAK)
designator D?  (value not drawn)
ComponentHeigt: 1.8; Firme: Linear; Leadform: формована; Kind: Микросхема; ClassName: *; Component Link: *; Packaging: SOT-223; NN: *
footprint D2-PAK+TO-220
pins: 1 GND, 2 IN, 3 OUT
text: *LDO

## LAN8720A-CP-TR (QFN-24)
designator D?  (value not drawn)
ComponentHeigt: 1.8; Firme: Linear; Leadform: формована; Kind: Микросхема; ClassName: *; Component Link: *; Packaging: SOT-223; NN: *
footprint QFN-24
pins: 1 VDD2A, 2 LED2, 3 LED1, 4 XTAL2, 5 XTAL1, 6 VDDCR, 7 RXD1/M1, 8 RXD0/M0, 9 VDDIO, 10 RXER/A0, 11 CRS/M2, 12 MDIO, 13 MDC, 14 ~{INT}/CLK, 15 ~{RST}, 16 TXEN, 17 TXD0, 18 TXD1, 19 VDD1A, 20 TXN, 21 TXP, 22 RXN, 23 RXP, 24 RBIAS, Pad GND
text: *LAN

## LAN8742A(I)-CZ (SQFN-24)
designator D?  (value not drawn)
ComponentHeigt: 1.8; Firme: Linear; Leadform: формована; Kind: Микросхема; ClassName: *; Component Link: *; Packaging: SOT-223; NN: *
footprint SQFN-24
pins: 1 VDD2A, 2 LED2, 3 LED1, 4 XTAL2, 5 XTAL1, 6 VDDCR, 7 RXD1/M1, 8 RXD0/M0, 9 VDDIO, 10 RXER/A0, 11 CRS/M2, 12 MDIO, 13 MDC, 14 ~{INT}/CLK, 15 ~{RST}, 16 TXEN, 17 TXD0, 18 TXD1, 19 VDD1A, 20 TXN, 21 TXP, 22 RXN, 23 RXP, 24 RBIAS, Pad GND
text: *LAN

## LCD 1.3 (240*240,SPI,ST7789)
designator D?  (value not drawn)
ComponentHeigt: 5.5; Name: Вилка; Specification: Вилка PLD2-2 *; Typ: PLD2-2; ClassName: *; Component Link: *; ComponentWeigt: *; Firme: *; Leadform: *; NN: *; KIND: *
footprint LCD_1.3_ST7789
pins: 1 GND, 2 LD_K, 3 LD_A, 4 VCC (power), 5 GND, 6 GND, 7 DC (in), 8 ~{CS} (in), 9 SCL (in), 10 SDA (io), 11 ~{RST} (in), 12 GND
1 alternate drawing of the same symbol
text: LCD; 1.3; ST7789

## LD1117S50TR (SOT-223)
designator D?  (value not drawn)
ComponentHeigt: 1.8; Firme: Linear; Leadform: формована; Kind: Микросхема; ClassName: *; Component Link: *; Packaging: SOT-223; NN: *
footprint SOT-223
pins: 1 GND, 2 OUT, 3 IN
text: *LDO

## LED(0603)
designator VD?  (value not drawn)
ComponentHeigt: 0.75; Leadform: в отверстия; Firme: Kingbright; NN: 24003000; KIND: Светодиод L-1154GD Kingbright; Component Link: *; ClassName: *
footprint 0603(LED)
pins: 1 A, 2 K
1 alternate drawing of the same symbol

## LED(0805)
designator VD?  (value not drawn)
ComponentHeigt: 0.75; Leadform: в отверстия; Firme: Kingbright; NN: 24003000; KIND: Светодиод L-1154GD Kingbright; Component Link: *; ClassName: *
footprint 0805(LED)
pins: 1 A, 2 K
1 alternate drawing of the same symbol

## LL4148 NXP
designator VD?  (value not drawn)
ComponentHeigt: 1.6; Leadform: SMD; Firme: NXP; NN: 24009301; KIND: Диод LL4148 NXP; Component Link: http://www.nxp.com; Packaging: SOD-80C; ClassName: *
footprint SOD80C
pins: 1 A, 2 K
1 alternate drawing of the same symbol

## LM1117GS-3.3 (SOT-223)
designator D?  (value not drawn)
ComponentHeigt: 1.8; Firme: Linear; Leadform: формована; Kind: Микросхема; ClassName: *; Component Link: *; Packaging: SOT-223; NN: *
footprint SOT-223
pins: 1 GND, 2 VOUT, 3 VIN
text: *STU

## LM1117GS-5.0 (SOT-223)
designator D?  (value not drawn)
ComponentHeigt: 1.8; Firme: Linear; Leadform: формована; Kind: Микросхема; ClassName: *; Component Link: *; Packaging: SOT-223; NN: *
footprint SOT-223
pins: 1 GND, 2 VOUT, 3 VIN
text: *STU

## LM8805SF5-3.3 (SOT-23-5)
designator D?  (value not drawn)
ComponentHeigt: 1.8; Firme: Linear; Leadform: формована; Kind: Микросхема; ClassName: *; Component Link: *; Packaging: SOT-223; NN: *
footprint SOT-23-5
pins: 1 VIN (power), 2 GND, 3 EN (in), 4 BYP, 5 VOUT
text: *STU

## LMV321 (SOT-23-5)
designator D?  (value not drawn)
ComponentHeigt: 1.75; Firme: AD; Leadform: SMD; NN: 28017970; Kind: Микросхема OP184FSZ AD; ClassName: *; Component Link: http://www.analog.com/; ComponentWeigt: *; Packaging: SOIC-8(R-8)
footprint SOT-23-5
pins: 1 IN+, 2 -Vcc, 3 IN-, 4 OUT, 5 +Vcc (power)

## LQW18ANR10J(0603) Murata
designator L?  (value not drawn)
ComponentHeigt: 1.1; Leadform: SMD; Firme: Murata; ClassName: *; Component Link: *; ComponentWeigt: *; Packaging: 1206; NN: *; KIND: *
footprint 0603
pins: 1, 2

## LT1818CS8 (SOIC-8)
designator D?  (value not drawn)
ComponentHeigt: 1.75; Firme: AD; Leadform: SMD; NN: 28017970; Kind: Микросхема OP184FSZ AD; ClassName: *; Component Link: http://www.analog.com/; ComponentWeigt: *; Packaging: SOIC-8(R-8)
footprint SOIC-8(R-8)
pins: 2 IN-, 3 IN+, 4 -Vcc, 6 OUT, 7 +Vcc (power)

## LY68L6400SLIT (SOP-8)
designator D?  (value not drawn)
ComponentHeigt: 1.8; Firme: Linear; Leadform: формована; Kind: Микросхема; ClassName: *; Component Link: *; Packaging: SOT-223; NN: *
footprint SOIC-8(R-8)
pins: 1 ~{CS} (in), 2 DO(I1) (out), 3 SIO2 (io), 4 GND, 5 DI(I0) (in), 6 CLK (in), 7 SIO3 (io), 8 VCC (power)
text: *ROM

## M1 (SMA)
designator VD?
ComponentHeigt: 2.47; ComponentWeigt: 0.95; Firme: ONS; Leadform: SMD; NN: 20603471; KIND: Диод MBRS360BT3G ONS; ClassName: *; Packaging: SMB
footprint SMA(DO-214AC)
pins: 1 A, 2 K

## MAX485CSA (SOIC-8)
designator D?  (value not drawn)
ComponentHeigt: 1.8; Firme: Linear; Leadform: формована; Kind: Микросхема; ClassName: *; Component Link: *; Packaging: SOT-223; NN: *
footprint SOIC-8(R-8)
pins: 1 RO (out), 2 ~{RE} (in), 3 DE (in), 4 DI (in), 5 GND, 6 A (io), 7 B (io), 8 VCC (power)
text: *BUF

## MBR0520LT1G (SOD-123)
designator VD?  (value not drawn)
ComponentHeigt: 1.35; ComponentWeigt: 0.01; Leadform: SMD; Firme: Diodes; KIND: Диод; Component Link: *; Packaging: SOD-123; ClassName: *; NN: *
footprint SOD-123
pins: 1 A, 2 K
1 alternate drawing of the same symbol

## MBRS360T3G (SMB)
designator VD?  (value not drawn)
ComponentHeigt: 0.75; Leadform: в отверстия; Firme: Kingbright; NN: 24003000; KIND: Светодиод L-1154GD Kingbright; Component Link: *; ClassName: *
footprint SMB(DO-214AA)
pins: 1 A, 2 K
1 alternate drawing of the same symbol

## MCP1700T-3302E/TT (SOT-23)
designator D?  (value not drawn)
ComponentHeigt: 1.8; Firme: Linear; Leadform: формована; Kind: Микросхема; ClassName: *; Component Link: *; Packaging: SOT-223; NN: *
footprint SOT-23
pins: 1 GND, 2 VOUT, 3 VIN
text: *STU

## MF-MSMF030 (0.3А)
designator FU?
Firme: Bourns; ComponentHeigt: 0.85; Leadform: SMD; NN: 25200774; KIND: Предохранитель MF-PSMF010X Bourns; ClassName: *; Component Link: *; ComponentWeigt: *; Packaging: 0805
footprint MF-MSMF030
pins: 1, 2

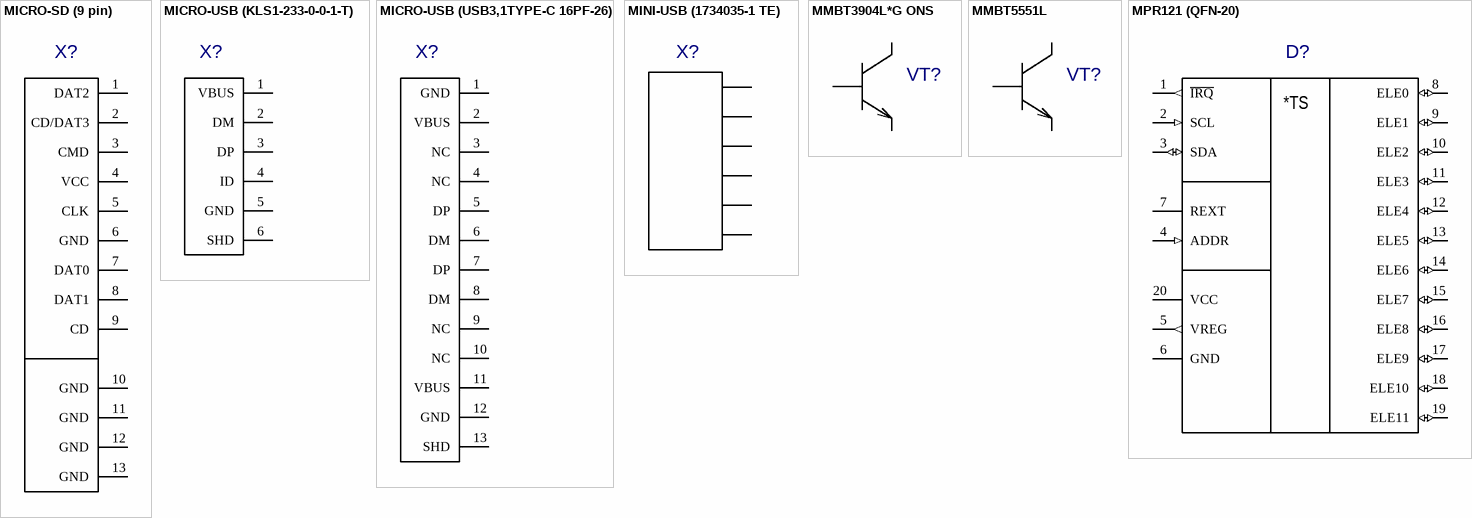
[diagram p5: symbols MICRO-SD (9 pin) to MPR121 (QFN-20)]

## MICRO-SD (9 pin)
designator X?  (value not drawn)
ComponentHeigt: 5.5; Name: Вилка; Specification: Вилка PLD2-2 *; Typ: PLD2-2; ClassName: *; Component Link: *; ComponentWeigt: *; Firme: *; Leadform: *; NN: *; KIND: *
footprint MICRO-SD (9 pin)
pins: 1 DAT2, 2 CD/DAT3, 3 CMD, 4 VCC, 5 CLK, 6 GND, 7 DAT0, 8 DAT1, 9 CD, 10 GND, 11 GND, 12 GND, 13 GND
1 alternate drawing of the same symbol

## MICRO-USB (KLS1-233-0-0-1-T)
designator X?  (value not drawn)
ComponentHeigt: 5.5; Name: Вилка; Specification: Вилка PLD2-2 *; Typ: PLD2-2; ClassName: *; Component Link: *; ComponentWeigt: *; Firme: *; Leadform: *; NN: *; KIND: *
footprint MICRO-USB(KLS1-233-0-0-1-T)
pins: 1 VBUS, 2 DM, 3 DP, 4 ID, 5 GND, 6 SHD
1 alternate drawing of the same symbol

## MICRO-USB (USB3,1TYPE-C 16PF-26)
designator X?  (value not drawn)
ComponentHeigt: 5.5; Name: Вилка; Specification: Вилка PLD2-2 *; Typ: PLD2-2; ClassName: *; Component Link: *; ComponentWeigt: *; Firme: *; Leadform: *; NN: *; KIND: *
footprint MICRO-USB (USB3,1TYPE-C 16PF-26)
pins: 1 GND, 2 VBUS, 3 NC, 4 NC, 5 DP, 6 DM, 7 DP, 8 DM, 9 NC, 10 NC, 11 VBUS, 12 GND, 13 SHD
1 alternate drawing of the same symbol

## MINI-USB (1734035-1 TE)
designator X?  (value not drawn)
ComponentHeigt: 5.5; Name: Вилка; Specification: Вилка PLD2-2 *; Typ: PLD2-2; ClassName: *; Component Link: *; ComponentWeigt: *; Firme: *; Leadform: *; NN: *; KIND: *
footprint MINI-USB(1734035-1 TE)
pins: 1 VBUS, 2 D-, 3 D+, 4 ID, 5 GND, 6 SHIELD
1 alternate drawing of the same symbol

## MMBT3904L*G ONS
designator VT?
ComponentHeigt: 1.1; Firme: ONS; Leadform: SMD; NN: 24006226; KIND: Транзистор MMBT3904L*G ONS; ClassName: *; ComponentWeigt: *; Packaging: SOT-23
footprint SOT-23
pins: 1 B, 2 E, 3 K

## MMBT5551L
designator VT?
ComponentHeigt: 1.1; Firme: ONS; Leadform: SMD; NN: 24007468; KIND: Транзистор MMBT5551L*G ONS; ClassName: *; ComponentWeigt: *; Packaging: SOT-23
footprint SOT-23
pins: 1 B, 2 E, 3 K

## MPR121 (QFN-20)
designator D?
Leadform: по чертежу; Note: Установка по чертежу; Kind: Микросхема; Component Link: www.honeywell.com/radhard; ClassName: *; NN: *
footprint QFN-20
pins: 1 ~{IRQ} (out), 2 SCL (in), 3 SDA (io), 4 ADDR (in), 5 VREG (out), 6 GND, 7 REXT, 8 ELE0 (io), 9 ELE1 (io), 10 ELE2 (io), 11 ELE3 (io), 12 ELE4 (io), 13 ELE5 (io), 14 ELE6 (io), 15 ELE7 (io), 16 ELE8 (io), 17 ELE9 (io), 18 ELE10 (io), 19 ELE11 (io), 20 VCC (power)
text: *TS

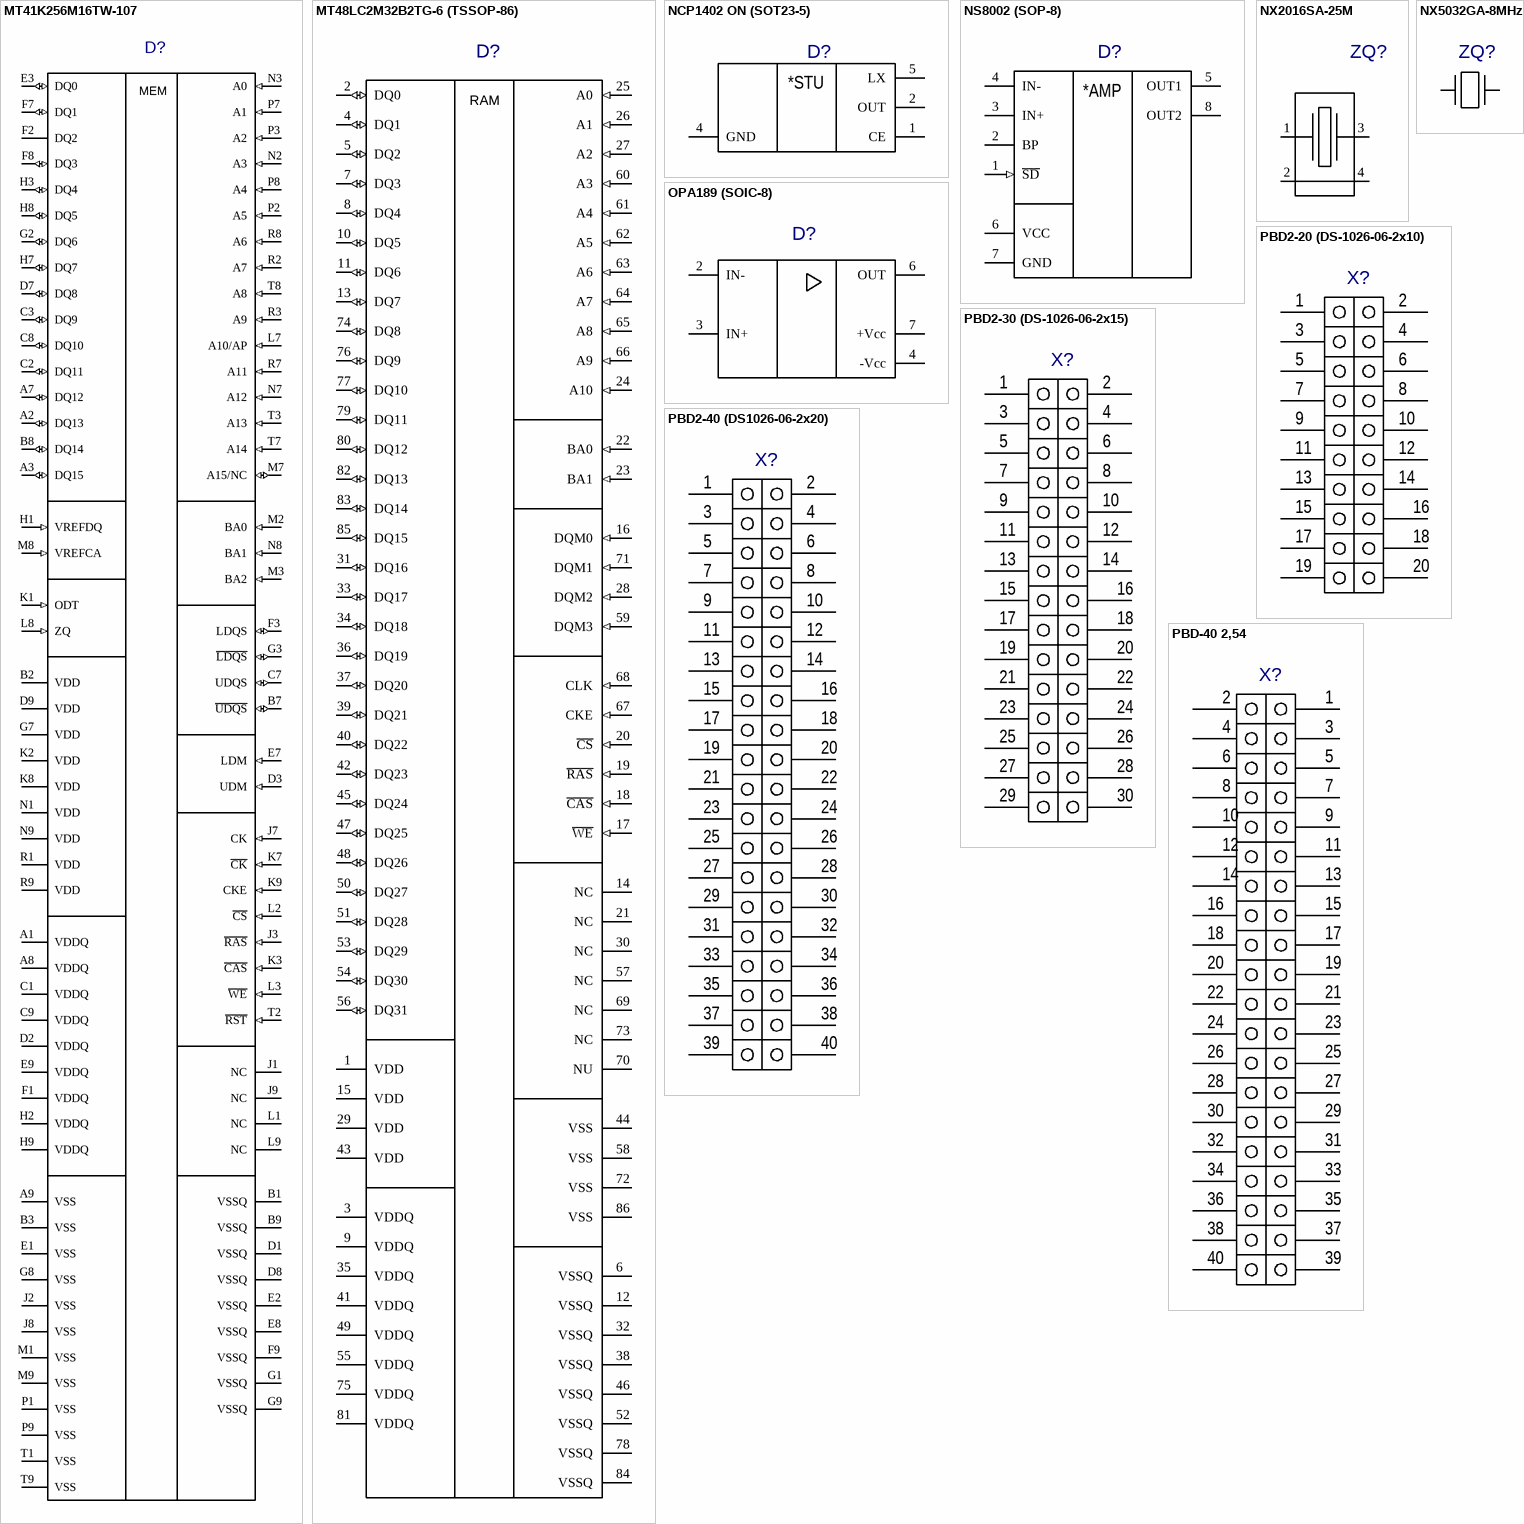
[diagram p6: symbols MT41K256M16TW-107 to PBD-40 2,54]

## MT41K256M16TW-107
designator D?  (value not drawn)
ComponentHeigt: 1.8; Firme: Linear; Leadform: формована; Kind: Микросхема; ClassName: *; Component Link: *; Packaging: SOT-223; NN: *
footprint FBGA-96
pins: A1 VDDQ (power), A2 DQ13 (io), A3 DQ15 (io), A7 DQ12 (io), A8 VDDQ (power), A9 VSS, B1 VSSQ, B2 VDD (power), B3 VSS, B7 ~{UDQS} (io), B8 DQ14 (io), B9 VSSQ, C1 VDDQ (power), C2 DQ11 (io), C3 DQ9 (io), C7 UDQS (io), C8 DQ10 (io), C9 VDDQ (power), D1 VSSQ, D2 VDDQ (power), D3 UDM (in), D7 DQ8 (io), D8 VSSQ, D9 VDD (power), E1 VSS, E2 VSSQ, E3 DQ0 (io), E7 LDM (in), E8 VSSQ, E9 VDDQ (power), F1 VDDQ (power), F2 DQ2, F3 LDQS (io), F7 DQ1 (io), F8 DQ3 (io), F9 VSSQ, G1 VSSQ, G2 DQ6 (io), G3 ~{LDQS} (io), G7 VDD (power), G8 VSS, G9 VSSQ, H1 VREFDQ (in), H2 VDDQ (power), H3 DQ4 (io), H7 DQ7 (io), H8 DQ5 (io), H9 VDDQ (power), J1 NC, J2 VSS, J3 ~{RAS} (in), J7 CK (in), J8 VSS, J9 NC, K1 ODT (in), K2 VDD (power), K3 ~{CAS} (in), K7 ~{CK} (in), K8 VDD (power), K9 CKE (in), L1 NC, L2 ~{CS} (in), L3 ~{WE} (in), L7 A10/AP (in), L8 ZQ (in), L9 NC, M1 VSS, M2 BA0 (in), M3 BA2 (in), M7 A15/NC (io), M8 VREFCA (in), M9 VSS, N1 VDD (power), N2 A3 (in), N3 A0 (in), N7 A12 (in), N8 BA1 (in), N9 VDD (power), P1 VSS, P2 A5 (in), P3 A2 (in), P7 A1 (in), P8 A4 (in), P9 VSS, R1 VDD (power), R2 A7 (in), R3 A9 (in), R7 A11 (in), R8 A6 (in), R9 VDD (power), T1 VSS, T2 ~{RST} (in), T3 A13 (in), T7 A14 (in), T8 A8 (in), T9 VSS
text: MEM

## MT48LC2M32B2TG-6 (TSSOP-86)
designator D?, comment MT41K256M16TW-107  (value not drawn)
ComponentHeigt: 1.8; Firme: Linear; Leadform: формована; Kind: Микросхема; ClassName: *; Component Link: *; Packaging: SOT-223; NN: *
footprint TSSOP-86
pins: 1 VDD (power), 2 DQ0 (io), 3 VDDQ (power), 4 DQ1 (io), 5 DQ2 (io), 6 VSSQ, 7 DQ3 (io), 8 DQ4 (io), 9 VDDQ (power), 10 DQ5 (io), 11 DQ6 (io), 12 VSSQ, 13 DQ7 (io), 14 NC, 15 VDD (power), 16 DQM0 (in), 17 ~{WE} (in), 18 ~{CAS} (in), 19 ~{RAS} (in), 20 ~{CS} (in), 21 NC, 22 BA0 (in), 23 BA1 (in), 24 A10 (in), 25 A0 (in), 26 A1 (in), 27 A2 (in), 28 DQM2 (in), 29 VDD (power), 30 NC, 31 DQ16 (io), 32 VSSQ, 33 DQ17 (io), 34 DQ18 (io), 35 VDDQ (power), 36 DQ19 (io), 37 DQ20 (io), 38 VSSQ, 39 DQ21 (io), 40 DQ22 (io), 41 VDDQ (power), 42 DQ23 (io), 43 VDD (power), 44 VSS, 45 DQ24 (io), 46 VSSQ, 47 DQ25 (io), 48 DQ26 (io), 49 VDDQ (power), 50 DQ27 (io), 51 DQ28 (io), 52 VSSQ, 53 DQ29 (io), 54 DQ30 (io), 55 VDDQ (power), 56 DQ31 (io), 57 NC, 58 VSS, 59 DQM3 (in), 60 A3 (in), 61 A4 (in), 62 A5 (in), 63 A6 (in), 64 A7 (in), 65 A8 (in), 66 A9 (in), 67 CKE (in), 68 CLK (in), 69 NC, 70 NU, 71 DQM1 (in), 72 VSS, 73 NC, 74 DQ8 (io), 75 VDDQ (power), 76 DQ9 (io), 77 DQ10 (io), 78 VSSQ, 79 DQ11 (io), 80 DQ12 (io), 81 VDDQ (power), 82 DQ13 (io), 83 DQ14 (io), 84 VSSQ, 85 DQ15 (io), 86 VSS
text: RAM

## NCP1402 ON (SOT23-5)
designator D?  (value not drawn)
ComponentHeigt: 1.8; Firme: Linear; Leadform: формована; Kind: Микросхема; ClassName: *; Component Link: *; Packaging: SOT-223; NN: *
footprint SOT-23-5
pins: 1 CE, 2 OUT, 4 GND, 5 LX
text: *STU

## NS8002 (SOP-8)
designator D?  (value not drawn)
ComponentHeigt: 1.8; Firme: Linear; Leadform: формована; Kind: Микросхема; ClassName: *; Component Link: *; Packaging: SOT-223; NN: *
footprint SOIC-8(R-8)
pins: 1 ~{SD} (in), 2 BP, 3 IN+, 4 IN-, 5 OUT1, 6 VCC (power), 7 GND, 8 OUT2
text: *AMP

## NX2016SA-25M
designator ZQ?, comment KX-7T Geyer  (value not drawn)
ComponentHeigt: 0.8; Leadform: SMD; NN: 24502747; KIND: Генератор KX-7T 16MHZ Geyer; Value: *; ComponentLink: *; ClassName: *; Firme: Geyer
footprint NX2016SA-25M
pins: 1, 2, 3, 4

## NX5032GA-8MHz
designator ZQ?  (value not drawn)
footprint NX5032GA-8MHz
pins: 1 (power), 2 (power)

## OPA189 (SOIC-8)
designator D?  (value not drawn)
ComponentHeigt: 1.75; Firme: AD; Leadform: SMD; NN: 28017970; Kind: Микросхема OP184FSZ AD; ClassName: *; Component Link: http://www.analog.com/; ComponentWeigt: *; Packaging: SOIC-8(R-8)
footprint SOIC-8(R-8)
pins: 2 IN-, 3 IN+, 4 -Vcc, 6 OUT, 7 +Vcc (power)

## PBD2-20 (DS-1026-06-2x10)
designator X?  (value not drawn)
ComponentHeigt: 5.5; Name: Вилка; Specification: Вилка PLD2-2 *; Typ: PLD2-2; ClassName: *; Component Link: *; ComponentWeigt: *; Firme: *; Leadform: *; NN: *; KIND: *
footprint PBD2-20 (DS1026-06-2x10)
pins: 1, 2, 3, 4, 5, 6, 7, 8, 9, 10, 11, 12, 13, 14, 15, 16, 17, 18, 19, 20
1 alternate drawing of the same symbol

## PBD2-30 (DS-1026-06-2x15)
designator X?  (value not drawn)
ComponentHeigt: 5.5; Name: Вилка; Specification: Вилка PLD2-2 *; Typ: PLD2-2; ClassName: *; Component Link: *; ComponentWeigt: *; Firme: *; Leadform: *; NN: *; KIND: *
footprint PBD2-30 (DS1026-06-2x15)
pins: 1, 2, 3, 4, 5, 6, 7, 8, 9, 10, 11, 12, 13, 14, 15, 16, 17, 18, 19, 20, 21, 22, 23, 24, 25, 26, 27, 28, 29, 30
1 alternate drawing of the same symbol

## PBD2-40 (DS1026-06-2x20)
designator X?  (value not drawn)
ComponentHeigt: 5.5; Name: Вилка; Specification: Вилка PLD2-2 *; Typ: PLD2-2; ClassName: *; Component Link: *; ComponentWeigt: *; Firme: *; Leadform: *; NN: *; KIND: *
footprint PBD2-40 (DS1026-06-2x20)
pins: 1, 2, 3, 4, 5, 6, 7, 8, 9, 10, 11, 12, 13, 14, 15, 16, 17, 18, 19, 20, 21, 22, 23, 24, 25, 26, 27, 28, 29, 30, 31, 32, 33, 34, 35, 36, 37, 38, 39, 40
1 alternate drawing of the same symbol

## PBD-40 2,54
designator X?  (value not drawn)
ComponentHeigt: 5.5; Name: Вилка; Specification: Вилка PLD2-2 *; Typ: PLD2-2; ClassName: *; Component Link: *; ComponentWeigt: *; Firme: *; Leadform: *; NN: *; KIND: *
footprint PBD40-2,54
pins: 1, 2, 3, 4, 5, 6, 7, 8, 9, 10, 11, 12, 13, 14, 15, 16, 17, 18, 19, 20, 21, 22, 23, 24, 25, 26, 27, 28, 29, 30, 31, 32, 33, 34, 35, 36, 37, 38, 39, 40
1 alternate drawing of the same symbol

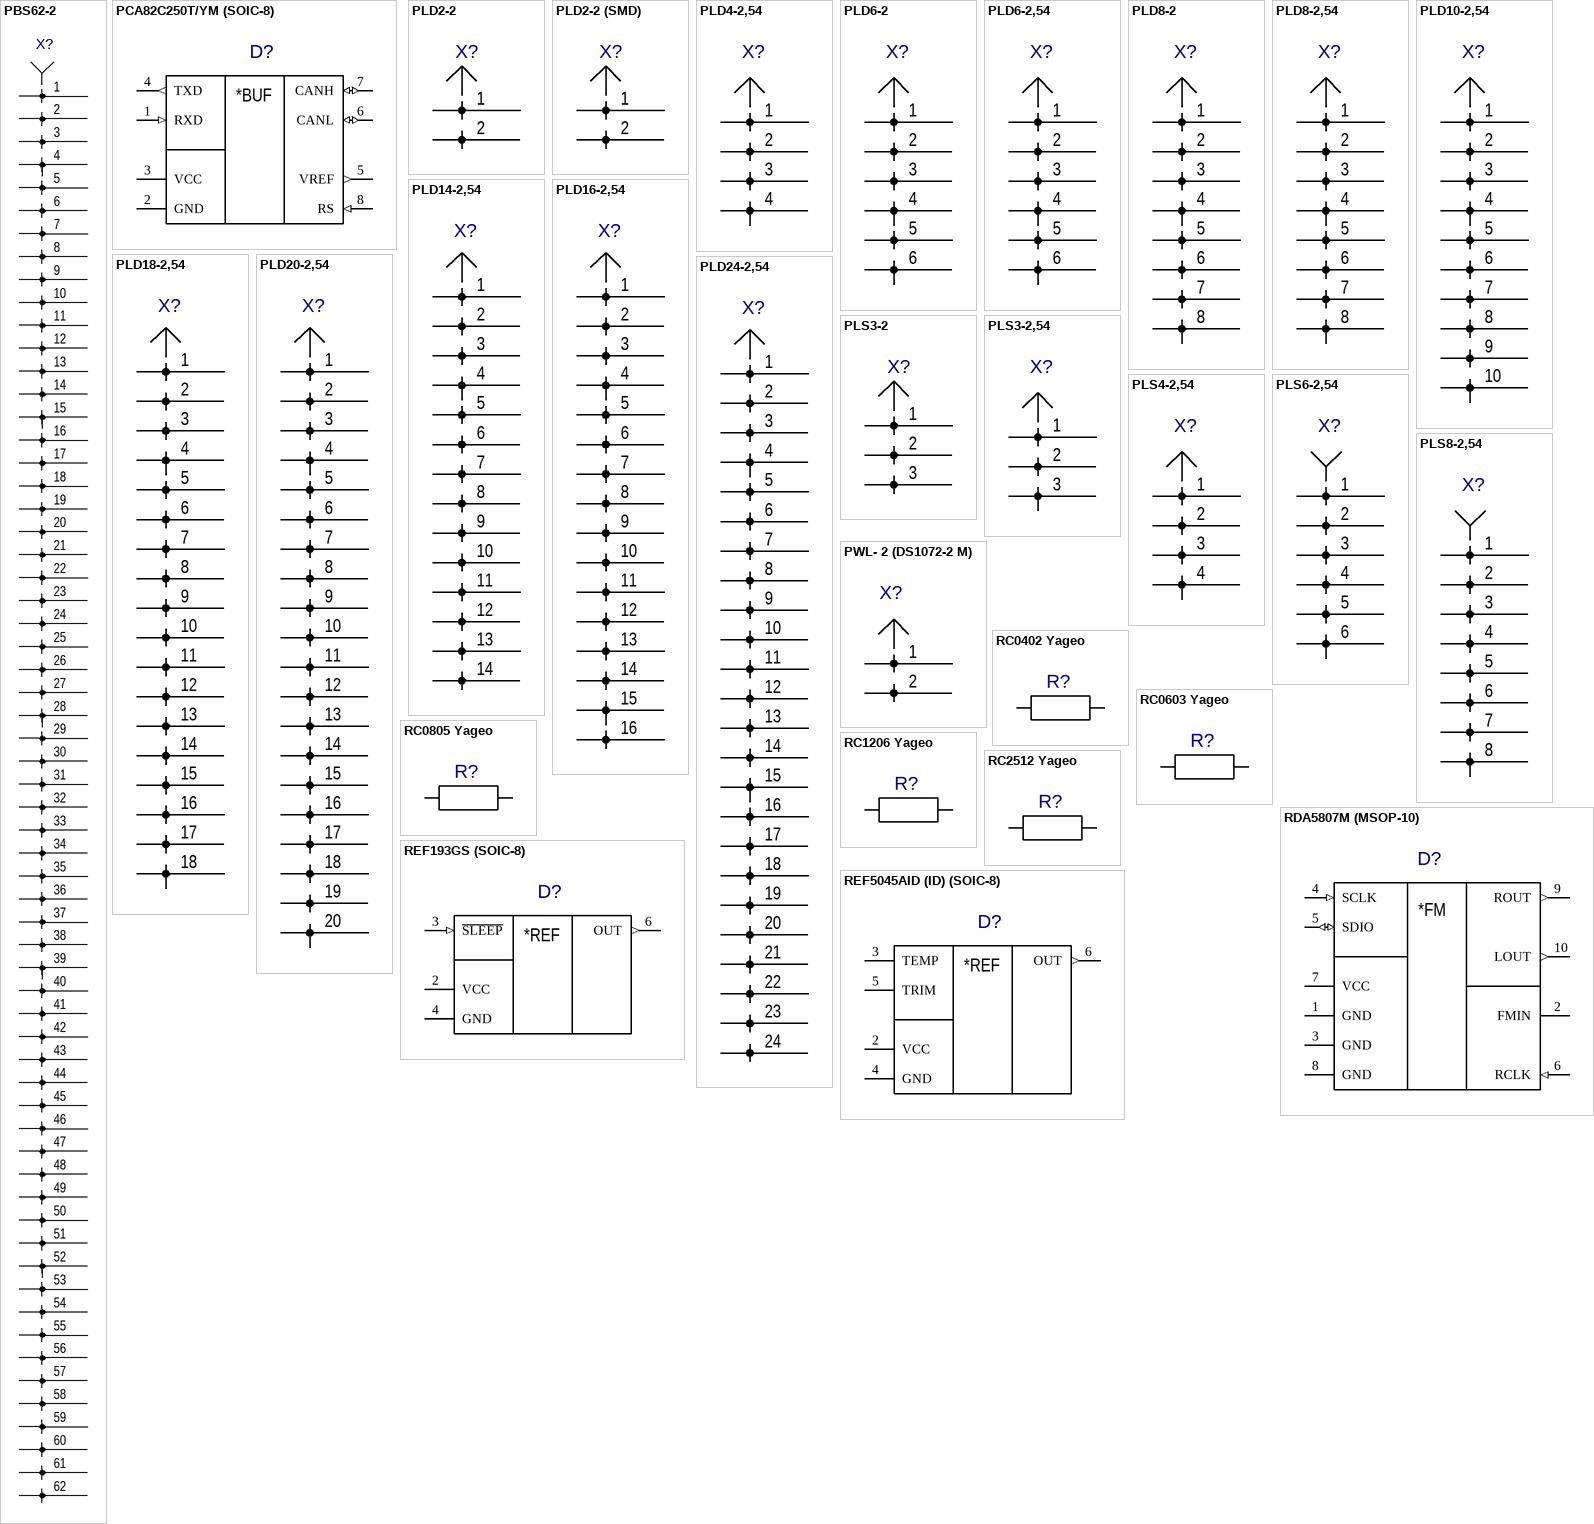
[diagram p7: symbols PBS62-2 to REF5045AID (ID) (SOIC-8)]

## PBS62-2
designator X?  (value not drawn)
ComponentHeigt: 5.5; Name: Вилка; Specification: Вилка PLD2-2 *; Typ: PLD2-2; ClassName: *; Component Link: *; ComponentWeigt: *; Firme: *; Leadform: *; NN: *; KIND: *
footprint PBS62-2
pins: 1, 2, 3, 4, 5, 6, 7, 8, 9, 10, 11, 12, 13, 14, 15, 16, 17, 18, 19, 20, 21, 22, 23, 24, 25, 26, 27, 28, 29, 30, 31, 32, 33, 34, 35, 36, 37, 38, 39, 40, 41, 42, 43, 44, 45, 46, 47, 48, 49, 50, 51, 52, 53, 54, 55, 56, 57, 58, 59, 60, 61, 62
1 alternate drawing of the same symbol

## PCA82C250T/YM (SOIC-8)
designator D?  (value not drawn)
ComponentHeigt: 1.8; Firme: Linear; Leadform: формована; Kind: Микросхема; ClassName: *; Component Link: *; Packaging: SOT-223; NN: *
footprint SOIC-8(R-8)
pins: 1 RXD (in), 2 GND, 3 VCC (power), 4 TXD (out), 5 VREF (out), 6 CANL (io), 7 CANH (io), 8 RS (in)
text: *BUF

## PLD2-2
designator X?  (value not drawn)
ComponentHeigt: 5.5; Name: Вилка; Specification: Вилка PLD2-2 *; Typ: PLD2-2; ClassName: *; Component Link: *; ComponentWeigt: *; Firme: *; Leadform: *; NN: *; KIND: *
footprint PLD2-2
pins: 1, 2
1 alternate drawing of the same symbol

## PLD2-2 (SMD)
designator X?  (value not drawn)
ComponentHeigt: 5.5; Name: Вилка; Specification: Вилка PLD2-2 *; Typ: PLD2-2; ClassName: *; Component Link: *; ComponentWeigt: *; Firme: *; Leadform: *; NN: *; KIND: *
footprint PLD2-2 (SMD)
pins: 1, 2
1 alternate drawing of the same symbol

## PLD4-2,54
designator X?  (value not drawn)
ComponentHeigt: 5.5; Name: Вилка; Specification: Вилка PLD2-2 *; Typ: PLD2-2; ClassName: *; Component Link: *; ComponentWeigt: *; Firme: *; Leadform: *; NN: *; KIND: *
footprint PLD4-2,54
pins: 1, 2, 3, 4
1 alternate drawing of the same symbol

## PLD6-2
designator X?  (value not drawn)
ComponentHeigt: 5.5; Name: Вилка; Specification: Вилка PLD2-2 *; Typ: PLD2-2; ClassName: *; Component Link: *; ComponentWeigt: *; Firme: *; Leadform: *; NN: *; KIND: *
footprint PLD6-2
pins: 1, 2, 3, 4, 5, 6
1 alternate drawing of the same symbol

## PLD6-2,54
designator X?  (value not drawn)
ComponentHeigt: 5.5; Name: Вилка; Specification: Вилка PLD2-2 *; Typ: PLD2-2; ClassName: *; Component Link: *; ComponentWeigt: *; Firme: *; Leadform: *; NN: *; KIND: *
footprint PLD6-2,54
pins: 1, 2, 3, 4, 5, 6
1 alternate drawing of the same symbol

## PLD8-2
designator X?  (value not drawn)
ComponentHeigt: 5.5; Name: Вилка; Specification: Вилка PLD2-2 *; Typ: PLD2-2; ClassName: *; Component Link: *; ComponentWeigt: *; Firme: *; Leadform: *; NN: *; KIND: *
footprint PLD8-2
pins: 1, 2, 3, 4, 5, 6, 7, 8
1 alternate drawing of the same symbol

## PLD8-2,54
designator X?  (value not drawn)
ComponentHeigt: 5.5; Name: Вилка; Specification: Вилка PLD2-2 *; Typ: PLD2-2; ClassName: *; Component Link: *; ComponentWeigt: *; Firme: *; Leadform: *; NN: *; KIND: *
footprint PLD8-2,54
pins: 1, 2, 3, 4, 5, 6, 7, 8
1 alternate drawing of the same symbol

## PLD10-2,54
designator X?  (value not drawn)
ComponentHeigt: 5.5; Name: Вилка; Specification: Вилка PLD2-2 *; Typ: PLD2-2; ClassName: *; Component Link: *; ComponentWeigt: *; Firme: *; Leadform: *; NN: *; KIND: *
footprint PLD10-2,54
pins: 1, 2, 3, 4, 5, 6, 7, 8, 9, 10
1 alternate drawing of the same symbol

## PLD14-2,54
designator X?  (value not drawn)
ComponentHeigt: 5.5; Name: Вилка; Specification: Вилка PLD2-2 *; Typ: PLD2-2; ClassName: *; Component Link: *; ComponentWeigt: *; Firme: *; Leadform: *; NN: *; KIND: *
footprint PLD14-2,54
pins: 1, 2, 3, 4, 5, 6, 7, 8, 9, 10, 11, 12, 13, 14
1 alternate drawing of the same symbol

## PLD16-2,54
designator X?  (value not drawn)
ComponentHeigt: 5.5; Name: Вилка; Specification: Вилка PLD2-2 *; Typ: PLD2-2; ClassName: *; Component Link: *; ComponentWeigt: *; Firme: *; Leadform: *; NN: *; KIND: *
footprint PLD16-2,54
pins: 1, 2, 3, 4, 5, 6, 7, 8, 9, 10, 11, 12, 13, 14, 15, 16
1 alternate drawing of the same symbol

## PLD18-2,54
designator X?  (value not drawn)
ComponentHeigt: 5.5; Name: Вилка; Specification: Вилка PLD2-2 *; Typ: PLD2-2; ClassName: *; Component Link: *; ComponentWeigt: *; Firme: *; Leadform: *; NN: *; KIND: *
footprint PLD18-2,54
pins: 1, 2, 3, 4, 5, 6, 7, 8, 9, 10, 11, 12, 13, 14, 15, 16, 17, 18
1 alternate drawing of the same symbol

## PLD20-2,54
designator X?  (value not drawn)
ComponentHeigt: 5.5; Name: Вилка; Specification: Вилка PLD2-2 *; Typ: PLD2-2; ClassName: *; Component Link: *; ComponentWeigt: *; Firme: *; Leadform: *; NN: *; KIND: *
footprint PLD20-2,54
pins: 1, 2, 3, 4, 5, 6, 7, 8, 9, 10, 11, 12, 13, 14, 15, 16, 17, 18, 19, 20
1 alternate drawing of the same symbol

## PLD24-2,54
designator X?  (value not drawn)
ComponentHeigt: 5.5; Name: Вилка; Specification: Вилка PLD2-2 *; Typ: PLD2-2; ClassName: *; Component Link: *; ComponentWeigt: *; Firme: *; Leadform: *; NN: *; KIND: *
footprint PLD24-2,54
pins: 1, 2, 3, 4, 5, 6, 7, 8, 9, 10, 11, 12, 13, 14, 15, 16, 17, 18, 19, 20, 21, 22, 23, 24
1 alternate drawing of the same symbol

## PLS3-2
designator X?  (value not drawn)
ComponentHeigt: 5.5; Name: Вилка; Specification: Вилка PLD2-2 *; Typ: PLD2-2; ClassName: *; Component Link: *; ComponentWeigt: *; Firme: *; Leadform: *; NN: *; KIND: *
footprint PLS3-2
pins: 1, 2, 3
1 alternate drawing of the same symbol

## PLS3-2,54
designator X?  (value not drawn)
ComponentHeigt: 5.5; Name: Вилка; Specification: Вилка PLD2-2 *; Typ: PLD2-2; ClassName: *; Component Link: *; ComponentWeigt: *; Firme: *; Leadform: *; NN: *; KIND: *
footprint PLS3-2,54
pins: 1, 2, 3
1 alternate drawing of the same symbol

## PLS4-2,54
designator X?  (value not drawn)
ComponentHeigt: 5.5; Name: Вилка; Specification: Вилка PLD2-2 *; Typ: PLD2-2; ClassName: *; Component Link: *; ComponentWeigt: *; Firme: *; Leadform: *; NN: *; KIND: *
footprint PLS4-2,54
pins: 1, 2, 3, 4
1 alternate drawing of the same symbol

## PLS6-2,54
designator X?  (value not drawn)
ComponentHeigt: 5.5; Name: Вилка; Specification: Вилка PLD2-2 *; Typ: PLD2-2; ClassName: *; Component Link: *; ComponentWeigt: *; Firme: *; Leadform: *; NN: *; KIND: *
footprint PLS6-2,54
pins: 1, 2, 3, 4, 5, 6
1 alternate drawing of the same symbol

## PLS8-2,54
designator X?  (value not drawn)
ComponentHeigt: 5.5; Name: Вилка; Specification: Вилка PLD2-2 *; Typ: PLD2-2; ClassName: *; Component Link: *; ComponentWeigt: *; Firme: *; Leadform: *; NN: *; KIND: *
footprint PLS8-2,54
pins: 1, 2, 3, 4, 5, 6, 7, 8
1 alternate drawing of the same symbol

## PWL- 2 (DS1072-2 M)
designator X?  (value not drawn)
ComponentHeigt: 5.5; Name: Вилка; Specification: Вилка PLD2-2 *; Typ: PLD2-2; ClassName: *; Component Link: *; ComponentWeigt: *; Firme: *; Leadform: *; NN: *; KIND: *
footprint PWL- 2 (DS1072-2 M)
pins: 1, 2
1 alternate drawing of the same symbol

## RC0402 Yageo
designator R?  (value not drawn)
ComponentHeigt: 0.5; Leadform: SMD; Firme: Yageo; Kind: Резистор; Packaging: 0402; ClassName: *; Component Link: *; NN: *
footprint 0402
pins: 1, 2

## RC0603 Yageo
designator R?  (value not drawn)
ComponentHeigt: 0.5; Leadform: SMD; Firme: Yageo; Kind: Резистор; Packaging: 0402; ClassName: *; Component Link: *; NN: *
footprint 0603
pins: 1, 2

## RC0805 Yageo
designator R?  (value not drawn)
ComponentHeigt: 0.6; Firme: Yageo; Leadform: SMD; Kind: Резистор; ClassName: *; ComponentWeigt: *; Component Link: *; Packaging: 0805; NN: *; Value: *
footprint 0805
pins: 1, 2

## RC1206 Yageo
designator R?  (value not drawn)
ComponentHeigt: 0.6; Firme: Yageo; Leadform: SMD; Kind: Резистор; ClassName: *; ComponentWeigt: *; Component Link: *; Packaging: 0805; NN: *; Value: *
footprint 1206
pins: 1, 2

## RC2512 Yageo
designator R?  (value not drawn)
ComponentHeigt: 0.6; Firme: Yageo; Leadform: SMD; Kind: Резистор; ClassName: *; ComponentWeigt: *; Component Link: *; Packaging: 0805; NN: *; Value: *
footprint 2512
pins: 1, 2

## RDA5807M (MSOP-10)
designator D?  (value not drawn)
ComponentHeigt: 1.8; Firme: Linear; Leadform: формована; Kind: Микросхема; ClassName: *; Component Link: *; Packaging: SOT-223; NN: *
footprint MSOP-10
pins: 1 GND, 2 FMIN, 3 GND, 4 SCLK (in), 5 SDIO (io), 6 RCLK (in), 7 VCC (power), 8 GND, 9 ROUT (out), 10 LOUT (out)
text: *FM

## REF193GS (SOIC-8)
designator D?  (value not drawn)
ComponentHeigt: 1.8; Firme: Linear; Leadform: формована; Kind: Микросхема; ClassName: *; Component Link: *; Packaging: SOT-223; NN: *
footprint SOIC-8(R-8)
pins: 2 VCC (power), 3 ~{SLEEP} (in), 4 GND, 6 OUT (out)
text: *REF

## REF5045AID (ID) (SOIC-8)
designator D?  (value not drawn)
ComponentHeigt: 1.8; Firme: Linear; Leadform: формована; Kind: Микросхема; ClassName: *; Component Link: *; Packaging: SOT-223; NN: *
footprint SOIC-8(R-8)
pins: 2 VCC (power), 3 TEMP, 4 GND, 5 TRIM, 6 OUT (out)
text: *REF

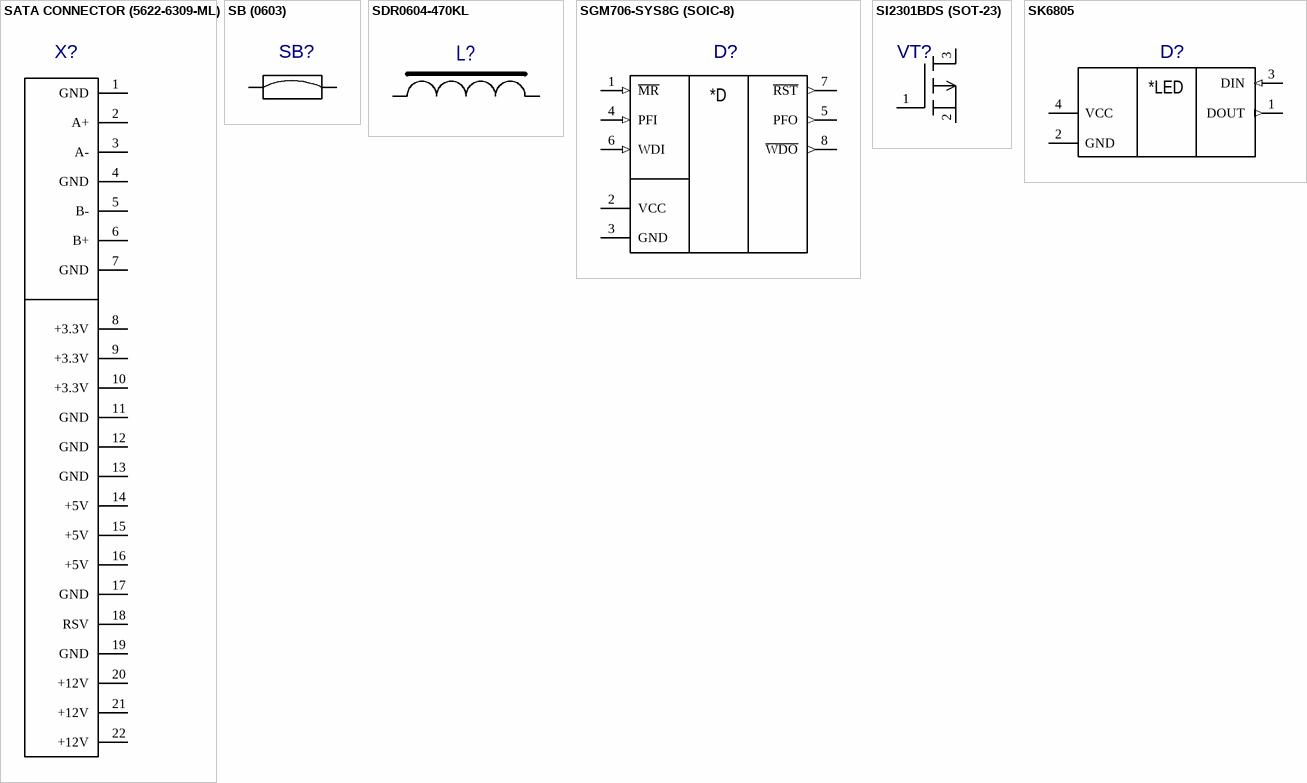
[diagram p8: symbols SATA CONNECTOR (5622-6309-ML) to SK6805]

## SATA CONNECTOR (5622-6309-ML)
designator X?  (value not drawn)
ComponentHeigt: 5.5; Name: Вилка; Specification: Вилка PLD2-2 *; Typ: PLD2-2; ClassName: *; Component Link: *; ComponentWeigt: *; Firme: *; Leadform: *; NN: *; KIND: *
footprint SATA CONNECTOR
pins: 1 GND, 2 A+, 3 A-, 4 GND, 5 B-, 6 B+, 7 GND, 8 +3.3V, 9 +3.3V, 10 +3.3V, 11 GND, 12 GND, 13 GND, 14 +5V, 15 +5V, 16 +5V, 17 GND, 18 RSV, 19 GND, 20 +12V, 21 +12V, 22 +12V
1 alternate drawing of the same symbol

## SB (0603)
designator SB?  (no BOM)
ComponentHeigt: 1.3; Firme: AVX; Leadform: SMD; KIND: Конденсатор; ClassName: *; Component Link: *; ComponentWeigt: *; Packaging: 0805; NN: *; Value: *
footprint SB 0603
pins: 1, 1